# Altium schematic symbol library Centralize.SchLib: 1081 symbols (part 17 of 26)
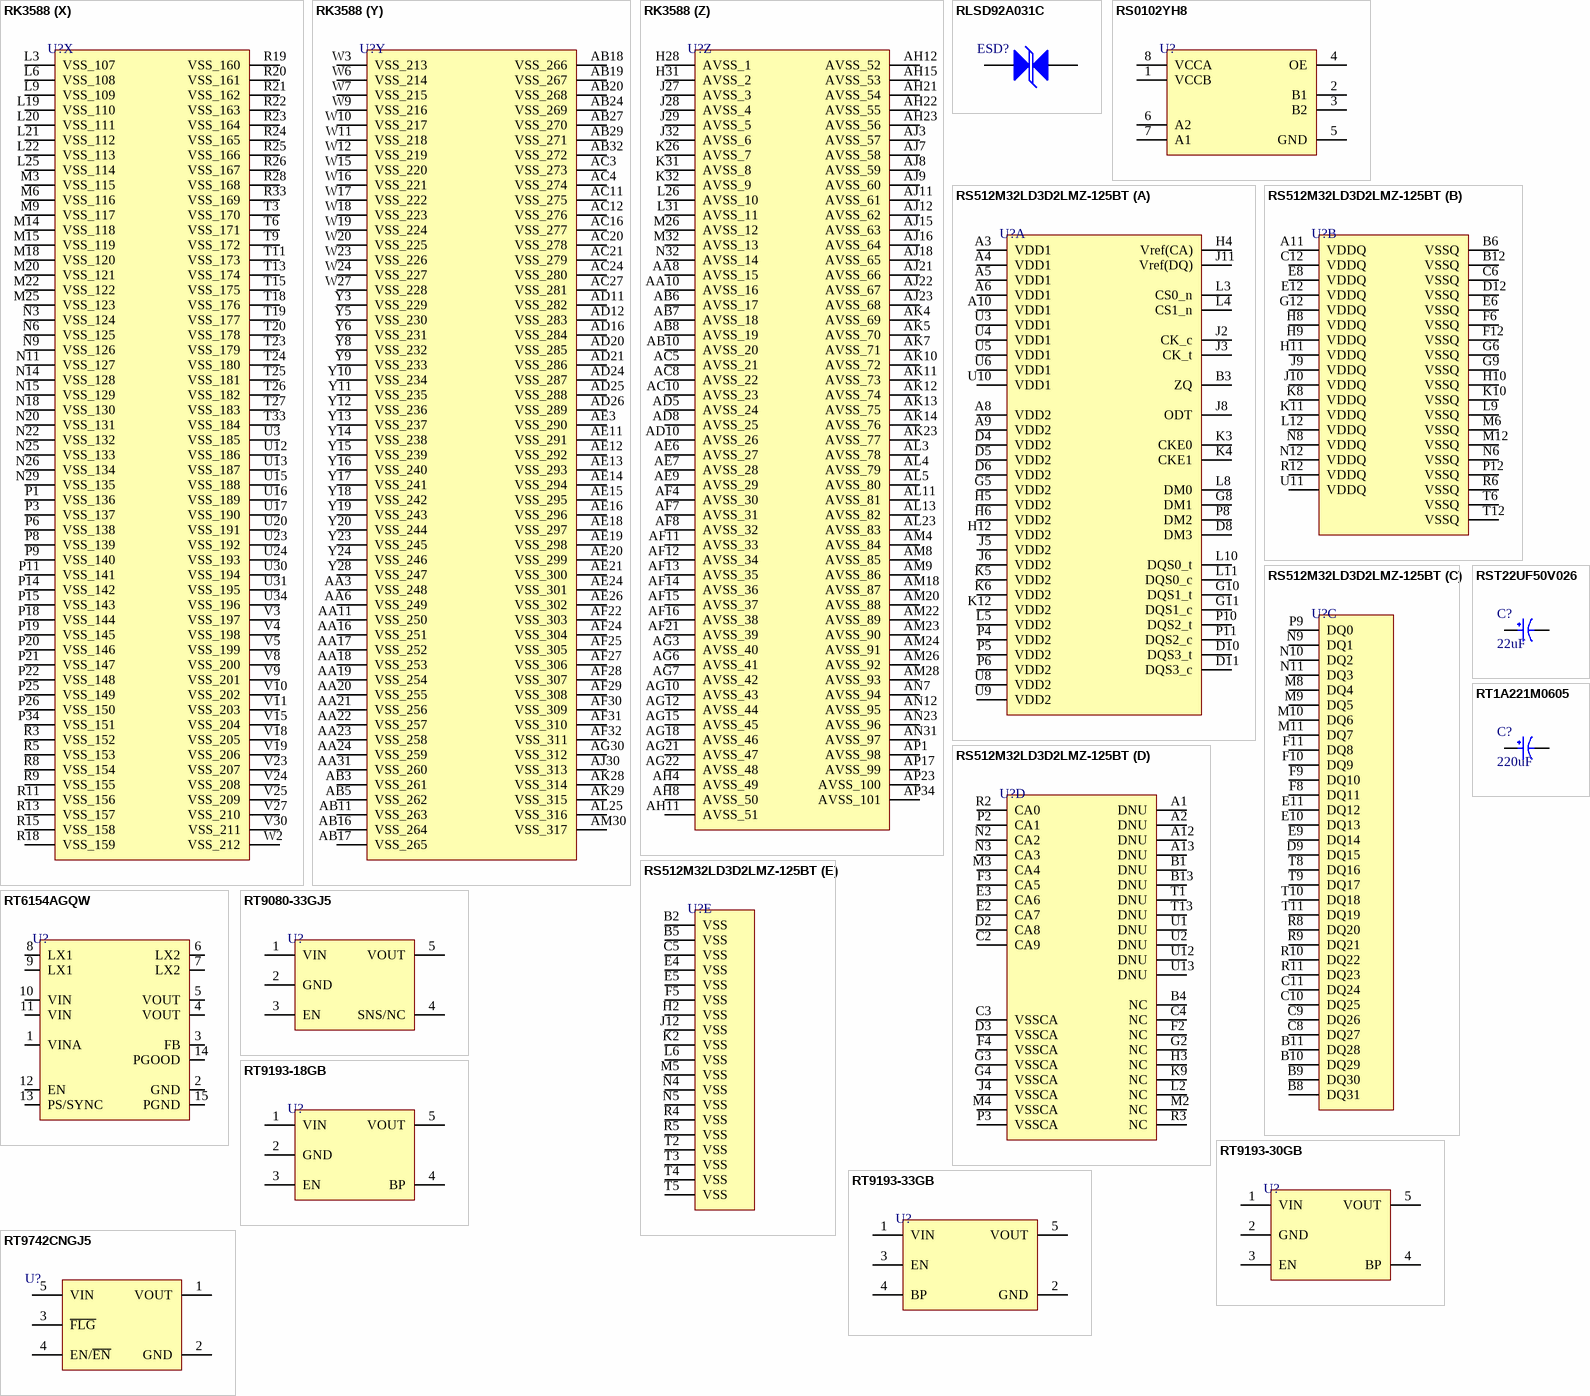
[diagram p63: symbols RK3588 to RT9742CNGJ5]

## RK3588
designator U?
Power Management IC; Manufacturer Part Number: RK3588LP4XEVB; Manufacturer: Rockchip; LCSC Part Number: *; Item Type: IC
footprint FCBGA-1088L
part A pins: AA1 DDR_CH0_DQ14_A, AA2 DDR_CH0_DQ15_A, AA4 DDR_CH0_DQS1N_A, AA5 DDR_CH0_DQS1P_A, AB1 DDR_CH0_DQ9_A, AB2 DDR_CH0_DQ8_A, AB4 DDR_CH0_DM1_A, AC1 DDR_CH0_DQ10_A, AC2 DDR_CH0_DQ11_A, B1       DDR_CH0_DQ11_B, C1       DDR_CH0_DQ9_B, C2       DDR_CH0_DQ10_B, D1       DDR_CH0_DQ15_B, D2       DDR_CH0_DQ8_B, E1       DDR_CH0_DQ13_B, E2       DDR_CH0_DQ14_B, E4 DDR_CH0_DM1_B, F1       DDR_CH0_DQ4_B, F2       DDR_CH0_DQ12_B, F4 DDR_CH0_DQS1N_B, F5 DDR_CH0_DQS1P_B, G1      DDR_CH0_DQ6_B, G2      DDR_CH0_DQ5_B, G4 DDR_CH0_DM0_B, H1       DDR_CH0_DQ0_B, H2       DDR_CH0_DQ7_B, H4 DDR_CH0_WCK1P_B, H5 DDR_CH0_WCK1N_B, H7 DDR_CH0_ZQ_B, J1       DDR_CH0_DQ2_B, J2       DDR_CH0_DQ1_B, J7 DDR_CH0_DQS0N_B, J8 DDR_CH0_DQS0P_B, K1 DDR_CH0_A4_B, K2       DDR_CH0_DQ3_B, K4 DDR_CH0_WCK0N_B, K5 DDR_CH0_WCK0P_B, K7 DDR_CH0_RESET_B, L2 DDR_CH0_A5_B, L4 DDR_CH0_LP4/4X_CKE1/LP5_CS1_B, L5 DDR_CH0_LP4/4X_CKE0/LP5_CS0_B, L7 DDR_CH0_LP4/4X_CS0_B, L8 DDR_CH0_LP4/4X_CS1_B, L10 DDR_CH0_VDDQ_CK, M1 DDR_CH0_CKB_B, M2 DDR_CH0_CK_B, M5 DDR_CH0_A1_B, M7 DDR_CH0_A6_B, M8 DDR_CH0_A0_B, M10 DDR_CH0_VDDQ_0, M11 DDR_CH0_PLL_AVSS, M12 DDR_CH0_PLL_AVDD1V8, N1 DDR_CH0_CKB_A, N2 DDR_CH0_CK_A, N4 DDR_CH0_A3_B, N5 DDR_CH0_A2_B, N7 DDR_CH0_LP4/4X_CKE1/LP5_CS1_A, N8 DDR_CH0_VDDQ_CKE, N10 DDR_CH0_VDDQ_1, N12 DDR_CH0_PLL_DVDD, N13 DDR_CH0_VDD_MIF_0, P2 DDR_CH0_A5_A, P4 DDR_CH0_A2_A, P5 DDR_CH0_A3_A, P7 DDR_CH0_LP4/4X_CKE0/LP5_CS0_A, P10 DDR_CH0_VDDQ_2, P12 DDR_CH0_VDD_3, P13 DDR_CH0_VDD_MIF_1, R1 DDR_CH0_A4_A, R2 DDR_CH0_DQ3_A, R6 DDR_CH0_LP4/4X_CS0_A, R7 DDR_CH0_LP4/4X_CS1_A, R10 DDR_CH0_VDDQ_3, R12 DDR_CH0_VDD_2, T1 DDR_CH0_DQ2_A, T2 DDR_CH0_DQ1_A, T4 DDR_CH0_RESET_A, T5 DDR_CH0_A6_A, T7 DDR_CH0_A0_A, T8 DDR_CH0_A1_A, T10 DDR_CH0_VDDQ_4, T12 DDR_CH0_VDD_1, U1 DDR_CH0_DQ0_A, U2 DDR_CH0_DQ7_A, U4 DDR_CH0_DQS0N_A, U5 DDR_CH0_DQS0P_A, U11 DDR_CH0_VDD_0, V1 DDR_CH0_DQ6_A, V2 DDR_CH0_DQ5_A, V6 DDR_CH0_WCK0N_A, V7 DDR_CH0_WCK0P_A, W1 DDR_CH0_DQ4_A, W4 DDR_CH0_WCK1P_A, W5 DDR_CH0_WCK1N_A, W8 DDR_CH0_ZQ_A, Y1 DDR_CH0_DQ12_A, Y2 DDR_CH0_DQ13_A, Y4 DDR_CH0_DM0_A 
part B pins: A2 DDR_CH1_DQ10_C, A3 DDR_CH1_DQ8_C, A4 DDR_CH1_DQ14_C, A5 DDR_CH1_DQ12_C, A6 DDR_CH1_DQ4_C, A7 DDR_CH1_DQ6_C, A8 DDR_CH1_DQ0_C, A9 DDR_CH1_DQ2_C, A10 DDR_CH1_A4_C, A12 DDR_CH1_CKB_C, A13 DDR_CH1_CKB_D, A15 DDR_CH1_A4_D, A16 DDR_CH1_DQ2_D, A17 DDR_CH1_DQ0_D, A18 DDR_CH1_DQ6_D, A19 DDR_CH1_DQ4_D, A20 DDR_CH1_DQ12_D, A21 DDR_CH1_DQ14_D, A22 DDR_CH1_DQ8_D, A23 DDR_CH1_DQ10_D, B2 DDR_CH1_DQ11_C, B3 DDR_CH1_DQ9_C, B4 DDR_CH1_DQ15_C, B5 DDR_CH1_DQ13_C, B7 DDR_CH1_DQ5_C, B8 DDR_CH1_DQ7_C, B9 DDR_CH1_DQ1_C, B10 DDR_CH1_DQ3_C, B11 DDR_CH1_A5_C, B12 DDR_CH1_CK_C, B13 DDR_CH1_CK_D, B14 DDR_CH1_A5_D, B15 DDR_CH1_DQ3_D, B16 DDR_CH1_DQ1_D, B17 DDR_CH1_DQ7_D, B18 DDR_CH1_DQ5_D, B20 DDR_CH1_DQ13_D, B21 DDR_CH1_DQ15_D, B22 DDR_CH1_DQ9_D, B23 DDR_CH1_DQ11_D, C19 DDR_CH1_RESET_D, D4 DDR_CH1_DM1_C, D5 DDR_CH1_DQS1N_C, D7 DDR_CH1_WCK1P_C, D9 DDR_CH1_DQS0N_C, D10 DDR_CH1_A6_C, D11 DDR_CH1_LP4/4X_CKE0/LP5_CS0_C, D13 DDR_CH1_A3_C, D14 DDR_CH1_A6_D, D16 DDR_CH1_LP4/4X_CKE0/LP5_CS0_D, D17 DDR_CH1_WCK0N_D, D19 DDR_CH1_LP4/4X_CS1_D, D20 DDR_CH1_DM0_D, D21 DDR_CH1_DQS1P_D, D22 DDR_CH1_DM1_D, E5 DDR_CH1_DQS1P_C, E7 DDR_CH1_WCK1N_C, E9 DDR_CH1_DQS0P_C, E10 DDR_CH1_RESET_C, E11 DDR_CH1_LP4/4X_CKE1/LP5_CS1_C, E13 DDR_CH1_A2_C, E14 DDR_CH1_A3_D, E16 DDR_CH1_LP4/4X_CKE1/LP5_CS1_D, E17 DDR_CH1_WCK0P_D, E19 DDR_CH1_LP4/4X_CS0_D, E21 DDR_CH1_DQS1N_D, F8 DDR_CH1_DM0_C, F12 DDR_CH1_A1_C, F18 DDR_CH1_ZQ_D, G8 DDR_CH1_ZQ_C, G9 DDR_CH1_WCK0P_C, G11 DDR_CH1_LP4/4X_CS0_C, G12 DDR_CH1_A0_C, G13 DDR_CH1_A2_D, G14 DDR_CH1_A1_D, G16 DDR_CH1_DQS0N_D, G18 DDR_CH1_WCK1N_D, H9 DDR_CH1_WCK0N_C, H11 DDR_CH1_LP4/4X_CS1_C, H13 DDR_CH1_VDDQ_CKE, H15 DDR_CH1_A0_D, H16 DDR_CH1_DQS0P_D, H18 DDR_CH1_WCK1P_D, K11 DDR_CH1_VDDQ_1, K12 DDR_CH1_VDDQ_0, K13 DDR_CH1_VDDQ_2, K14 DDR_CH1_VDDQ_3, K15 DDR_CH1_VDDQ_4, K16 DDR_CH1_PLL_AVDD1V8, L11 DDR_CH1_VDD_0, L12 DDR_CH1_VDD_1, L13 DDR_CH1_VDD_2, L14 DDR_CH1_VDD_3, L15 DDR_CH1_PLL_DVDD, L16 DDR_CH1_PLL_AVSS, L17 DDR_CH1_VDD_MIF_0, L18 DDR_CH1_VDD_MIF_1, M13 DDR_CH1_VDDQ_CK
part C pins: AA32 EMMC_D5/I2C1_SDA_M3/UART5_TX_M2/GPIO2_D5_u, AA33 EMMC_D3/FSPI_D3_M0/GPIO2_D3_u, AA34 EMMC_RSTN/I2C2_SCL_M2/UART5_RTSN_M1/GPIO2_A3_d, V26 EMMCIO_1V8, V32 EMMC_D2/FSPI_D2_M0/GPIO2_D2_u, V33 EMMC_D7/FSPI_CS1N_M0/GPIO2_D7_u, V34 EMMC_CLKOUT/GPIO2_A1_d, W32 EMMC_D6/FSPI_CS0N_M0/GPIO2_D6_u, W33 EMMC_D1/FSPI_D1_M0/GPIO2_D1_u, W34 EMMC_CMD/FSPI_CLK_M0/GPIO2_A0_u, Y32 EMMC_D4/I2C1_SCL_M3/UART5_RX_M2/GPIO2_D4_u, Y33 EMMC_D0/FSPI_D0_M0/GPIO2_D0_u, Y34 EMMC_DATA_STROBE/I2C2_SDA_M2/UART5_CTSN_M1/GPIO2_A2_d
part D pins: AA7 VCCIO2_1V8, AD1 SDMMC_D1/PDM1_SDI2_M0/JTAG_TMS_M1/I2C3_SDA_M4/UART2_RX_M1/PWM9_M1/GPIO4_D1_u, AD2 SDMMC_D0/PDM1_SDI3_M0/JTAG_TCK_M1/I2C3_SCL_M4/UART2_TX_M1/PWM8_M1/GPIO4_D0_u, AE1 SDMMC_CLK/PDM1_CLK0_M0/TEST_CLKOUT_M0/MCU_JTAG_TMS_M0/CAN0_RX_M1/UART5_TX_M0/GPIO4_D5_d, AE2 SDMMC_CMD/PDM1_CLK1_M0/MCU_JTAG_TCK_M0/CAN0_TX_M1/UART5_RX_M0/PWM7_IR_M1/GPIO4_D4_u, AF1 SDMMC_D3/PDM1_SDI0_M0/JTAG_TMS_M0/I2C8_SDA_M0/UART5_RTSN_M0/PWM10_M1/GPIO4_D3_u, AF2 SDMMC_D2/PDM1_SDI1_M0/JTAG_TCK_M0/I2C8_SCL_M0/UART5_CTSN_M0/GPIO4_D2_u, Y7 VCCIO2
part E pins: K29 CLK32K_IN/CLK32K_OUT0/GPIO0_B2__u, K30 SPI2_CS0_M2/I2C1_SDA_M1/PWM5_M0/UART0_TX_M1/GPIO0_B1_z, L29 SPI2_MISO_M2/I2C0_SCL_M0/GPIO0_B3_z, L30 SPI2_CS1_M2/I2C1_SCL_M1/UART0_RX_M1/GPIO0_B0_z, M29 TVSS, M30 PMIC_INT_L/GPIO0_A7_u, M31 NPOR, N27 OSC_1V8, N28 PMUIO1_1V8, N30 SPI2_MOSI_M2/I2C0_SDA_M0/GPIO0_A6_z, N31 SPI2_CLK_M2/SDMMC_PWREN/PMU_DEBUG/GPIO0_A5_d, P27 PMU_0V75, P31 SDMMC_DET/GPIO0_A4_u, P32 TSADC_SHUT_ORG/TSADC_SHUT/GPIO0_A1_z, P33 REFCLK_OUT/GPIO0_A0_d, R31 PMIC_SLEEP2/GPIO0_A3_d, R32 PMIC_SLEEP1/GPIO0_A2_d, R34 XIN_24M, T34 XOUT_24M, U18 PLL_AVDD1V8, U19 PLL_AVSS, V20 PLL_DVDD0V75
part F pins: P28 PMUIO2, P29 I2S1_MCLK_M1/JTAG_TCK_M2/I2C1_SCL_M0/UART2_TX_M0/PCIE30X1_1_CLKREQN_M0/GPIO0_B5_d, P30 I2S1_SDI0_M1/GPU_AVS/UART0_TX_M0/I2C4_SCL_M2/DP1_HPDIN_M1/PWM4_M0/PCIE30X1_0_PERSTN_M0/GPIO0_C5_u, R27 PMUIO2_1V8, R29 I2S1_SCLK_M1/JTAG_TMS_M2/I2C1_SDA_M0/UART2_RX_M0/PCIE30X1_1_WAKEN_M0/GPIO0_B6_d, R30 PDM0_CLK1_M1/PWM2_M0/UART0_RX_M0/I2C4_SDA_M2/DP0_HPDIN_M1/PCIE30X1_0_WAKEN_M0/GPIO0_C4_d, T28 I2S1_LRCK_M1/PWM0_M0/I2C2_SCL_M0/CAN0_TX_M0/SPI0_CS1_M0/PCIE30X1_1_PERSTN_M0/GPIO0_B7_d, T29 I2S1_SDI1_M1/NPU_AVS/UART0_RTSN/PWM5_M1/SPI0_CLK_M0/PCIE30X4_CLKREQN_M0/SATA_CP_POD/GPIO0_C6_u, T30 PMIC_SLEEP5/GPIO0_C3_d, T31 PDM0_CLK0_M1/PWM1_M0/I2C2_SDA_M0/CAN0_RX_M0/SPI0_MOSI_M0/PCIE30X1_0_CLKREQN_M0/GPIO0_C0_d, T32 PMIC_SLEEP4/GPIO0_C2_d, U32 PMIC_SLEEP3/GPIO0_C1_d, U33 LITCPU_AVS/SPI3_CLK_M2/GPIO0_D3_u, V28 I2S1_SDO3_M1/CPU_BIG1_AVS/I2C1_SDA_M2/CAN2_TX_M1/HDMI_TX0_SCL_M1/SPI3_CS1_M2/SATA_MP_SWITCH/GPIO0_D5_u, V29 I2S1_SDO2_M1/PDM0_SDI2_M1/PWM3_IR_M0/I2C1_SCL_M2/CAN2_RX_M1/HDMI_TX0_SDA_M1/SPI3_CS0_M2/PCIE30X2_PERSTN_M0/SATA_CPDET/GPIO0_D4_u, V31 I2S1_SDI2_M1/PDM0_SDI0_M1/I2C6_SDA_M0/UART1_RTSN_M2/PWM6_M0/SPI0_MISO_M0/PCIE30X4_WAKEN_M0/GPIO0_C7_d, W28 PMIC_SLEEP6/PDM0_SDI3_M1/GPIO0_D6_d, W29 I2S1_SDO1_M1/I2C0_SDA_M2/UART1_RX_M2/HDMI_RX_SCL_M0/SPI3_MOSI_M2/PCIE30X2_WAKEN_M0/HDMI_TX1_CEC_M1/GPIO0_D2_u, W30 I2S1_SDO0_M1/CPU_BIG0_AVS/I2C0_SCL_M2/UART0_CTSN/UART1_TX_M2/HDMI_RX_SDA_M0/SPI0_CS0_M0/PCIE30X2_CLKREQN_M0/HDMI_TX0_CEC_M1/GPIO0_D1_u, W31 I2S1_SDI3_M1/PDM0_SDI1_M1/I2C6_SCL_M0/UART1_CTSN_M2/PWM7_IR_M0/SPI3_MISO_M2/PCIE30X4_PERSTN_M0/GPIO0_D0_d
part G pins: D28 I2S0_SDI0/GPIO1_D4_d, D29 PDM0_CLK0_M0/I2C4_SDA_M4/PWM15_IR_M2/GPIO1_C6_d, D30 I2S0_LRCK/I2C2_SCL_M3/UART4_RTSN/GPIO1_C5_d, E28 I2S0_SDI1/PDM0_SDI3_M0/I2C1_SDA_M4/UART4_RX_M0/PWM1_M1/SPI1_CS0_M2/GPIO1_D3_d, E29 I2S0_SDO0/I2C4_SCL_M4/UART4_CTSN/GPIO1_C7_d, E30 PDM0_CLK1_M0/I2C2_SDA_M3/PWM11_IR_M2/SPI4_CS1_M0/GPIO1_C4_d, E31 I2S0_SCLK/I2C6_SCL_M1/UART3_CTSN/PWM7_IR_M2/SPI4_CS0_M0/GPIO1_C3_d, F26 I2S0_SDO1/I2C7_SCL_M0/UART6_TX_M2/SPI1_MISO_M2/GPIO1_D0_d, F27 I2S0_SDO2/I2S0_SDI3/PDM0_SDI1_M0/I2C7_SDA_M0/UART6_RX_M2/SPI1_MOSI_M2/GPIO1_D1_d, F28 I2S0_SDO3/I2S0_SDI2/PDM0_SDI2_M0/I2C1_SCL_M4/UART4_TX_M0/PWM0_M1/SPI1_CLK_M2/GPIO1_D2_d, F30 I2S0_MCLK/I2C6_SDA_M1/UART3_RTSN/PWM3_IR_M2/SPI4_CLK_M0/GPIO1_C2_d, G20 VCCIO1_1V8, G26 PDM0_SDI0_M0/SPI1_CS1_M2/GPIO1_D5_d, G27 I2C3_SCL_M0/UART3_TX_M0/SPI4_MOSI_M0/GPIO1_C1_z, G29 I2C3_SDA_M0/UART3_RX_M0/SPI4_MISO_M0/GPIO1_C0_z
part H pins: AB30 GMAC0_PPSTRIG/FSPI_CS1N_M1/HDMI_TX1_SCL_M0/I2C4_SCL_M1/UART7_TX_M0/GPIO2_B5_u, AB31 GMAC0_PTP_REFCLK/FSPI_CS0N_M1/HDMI_TX1_SDA_M0/I2C4_SDA_M1/UART7_RX_M0/GPIO2_B4_u, AB33 GMAC0_MDIO/I2C0_SCL_M1/UART9_CTSN_M0/PWM6_M2/SPI3_MOSI_M0/GPIO4_C5_d, AB34 GMAC0_MDC/I2C7_SDA_M1/UART9_RTSN_M0/PWM5_M2/SPI3_MISO_M0/GPIO4_C4_d, AC30 GMAC0_PPSCLK/TEST_CLKOUT_M1/HDMI_TX1_CEC_M0/UART9_RX_M0/SPI1_CS1_M0/GPIO2_C4_d, AC31 GMAC0_RXD3/SDIO_D1_M0/FSPI_D1_M1/UART6_TX_M0/GPIO2_A7_u, AC32 GMAC0_RXD2/SDIO_D0_M0/FSPI_D0_M1/UART6_RX_M0/GPIO2_A6_u, AC33 GMAC0_TXD2/SDIO_D3_M0/FSPI_D3_M1/I2C8_SDA_M1/UART6_CTSN_M0/GPIO2_B1_u, AC34 GMAC0_TXD3/SDIO_CMD_M0/I2C3_SCL_M3/GPIO2_B2_u, AD30 ETH0_REFCLKO_25M/I2S2_SDI_M0/I2C6_SCL_M2/SPI1_CS0_M0/GPIO2_C3_d, AD31 GMAC0_RXD1/I2C6_SDA_M2/UART9_TX_M0/SPI1_MOSI_M0/GPIO2_C2_d, AD32 GMAC0_RXD0/I2C2_SCL_M1/UART1_CTSN_M0/SPI1_MISO_M0/GPIO2_C1_d, AD33 GMAC0_TXD0/I2S2_MCLK_M0/I2C5_SCL_M4/UART1_RX_M0/GPIO2_B6_d, AD34 GMAC0_TXD1/I2S2_SCLK_M0/I2C5_SDA_M4/UART1_TX_M0/GPIO2_B7_d, AE30 CLK32K_OUT1/GPIO2_C5_d, AE31 GMAC0_RXDV_CRS/UART7_RTSN_M0/PWM2_M2/SPI3_CS0_M0/GPIO4_C2_d, AE32 GMAC0_RXCLK/SDIO_D2_M0/FSPI_D2_M1/I2C8_SCL_M1/UART6_RTSN_M0/GPIO2_B0_u, AE33 GMAC0_TXCLK/SDIO_CLK_M0/FSPI_CLK_M1/I2C3_SDA_M3/GPIO2_B3_d, AE34 GMAC0_TXEN/I2S2_LRCK_M0/I2C2_SDA_M1/UART1_RTSN_M0/SPI1_CLK_M0/GPIO2_C0_d, AF33 GMAC0_TXER/I2C0_SDA_M1/UART7_CTSN_M0/PWM7_IR_M3/SPI3_CLK_M0/GPIO4_C6_d, AF34 GMAC0_MCLKINOUT/I2S2_SDO_M0/I2C7_SCL_M1/PWM4_M1/SPI3_CS1_M0/GPIO4_C3_d, Y26 VCCIO3_1V8
part I pins: A24 PCIE30X1_1_CLKREQN_M2/DP0_HPDIN_M2/I2C2_SDA_M4/UART6_RX_M1/SPI4_MISO_M2/GPIO1_A0_d, A25 PCIE30X1_1_WAKEN_M2/DP1_HPDIN_M2/SATA1_ACT_LED_M1/I2C2_SCL_M4/UART6_TX_M1/SPI4_MOSI_M2/GPIO1_A1_d, A26 VOP_POST_EMPTY/I2C4_SDA_M3/UART6_RTSN_M1/PWM0_M2/SPI4_CLK_M2/GPIO1_A2_d, A27 HDMI_TX1_SDA_M2/I2C4_SCL_M3/UART6_CTSN_M1/PWM1_M2/SPI4_CS0_M2/GPIO1_A3_d, B25 HDMI_TX1_SCL_M2/SPI2_MISO_M0/GPIO1_A4_d, B26 HDMI_TX0_HPD_M0/SPI2_MOSI_M0/GPIO1_A5_d, C24 HDMI_TX1_HPD_M0/SPI2_CLK_M0/GPIO1_A6_d, C25 PDM1_SDI0_M1/PCIE30X1_1_PERSTN_M2/PWM3_IR_M3/SPI2_CS0_M0/GPIO1_A7_u, C27 PDM1_SDI1_M1/PCIE30X4_CLKREQN_M3/SPI2_CS1_M0/GPIO1_B0_u, D25 PDM1_SDI2_M1/PCIE30X4_WAKEN_M3/SPI0_MISO_M2/GPIO1_B1_d, D26 PDM1_SDI3_M1/PCIE30X4_PERSTN_M3/UART4_RX_M2/SPI0_MOSI_M2/GPIO1_B2_d, D27 PDM1_CLK1_M1/PCIE30X1_0_WAKEN_M2/SATA0_ACT_LED_M1/UART4_TX_M2/SPI0_CLK_M2/GPIO1_B3_d, E24 PDM1_CLK0_M1/PCIE30X1_0_PERSTN_M2/UART7_RX_M2/SPI0_CS0_M2/GPIO1_B4_u, E25 PCIE30X1_0_CLKREQN_M2/UART7_TX_M2/SPI0_CS1_M2/GPIO1_B5_u, E26 MIPI_CAMERA1_CLK_M0/SPDIF0_TX_M0/PCIE30X2_WAKEN_M3/HDMI_RX_HPDOUT_M2/I2C5_SCL_M3/UART1_TX_M1/GPIO1_B6_u, E27 MIPI_CAMERA2_CLK_M0/SPDIF1_TX_M0/PCIE30X2_PERSTN_M3/HDMI_RX_CEC_M2/SATA2_ACT_LED_M1/I2C5_SDA_M3/UART1_RX_M1/PWM13_M2/GPIO1_B7_u, F24 MIPI_CAMERA3_CLK_M0/HDMI_RX_SCL_M2/I2C8_SCL_M2/UART1_RTSN_M1/PWM14_M2/GPIO1_D6_u, F25 MIPI_CAMERA4_CLK_M0/PCIE30X2_CLKREQN_M3/HDMI_RX_SDA_M2/I2C8_SDA_M2/UART1_CTSN_M1/PWM15_IR_M3/GPIO1_D7_u, H20 VCCIO4_1V8, H21 VCCIO4
part J pins: AA27 HDMI_TX0_HPD_M1/PCIE30X2_PERSTN_M2/HDMI_RX_HPDOUT_M1/MCU_JTAG_TCK_M1/UART9_RX_M2/SPI0_CS0_M3/GPIO3_D4_d, AA28 GMAC1_PTP_REF_CLK/HDMI_TX1_HPD_M1/I2C3_SCL_M1/SPI1_MOSI_M1/GPIO3_B7_d, AA29 GMAC1_TXD2/SDIO_D0_M1/I2S3_MCLK/FSPI_D0_M2/I2C6_SDA_M4/PWM10_M0/SPI4_MISO_M1/GPIO3_A0_u, AA30 GMAC1_TXD3/SDIO_D1_M1/I2S3_SCLK/AUDDSM_LN/FSPI_D1_M2/I2C6_SCL_M4/PWM11_IR_M0/SPI4_MOSI_M1/GPIO3_A1_u, AB28 PCIE30X4_BUTTON_RSTN/DP1_HPDIN_M0/MCU_JTAG_TMS_M1/UART9_TX_M2/PWM11_IR_M3/SPI0_CS1_M3/GPIO3_D5_d, AC28 GMAC1_TXD0/I2S2_SDO_M1/UART2_RTSN/GPIO3_B3_u, AC29 GMAC1_TXD1/I2S2_MCLK_M1/UART2_CTSN/GPIO3_B4_u, AD27 GMAC1_RXD2/SDIO_D2_M1/I2S3_LRCK/AUDDSM_LP/FSPI_D2_M2/UART8_TX_M1/SPI4_CLK_M1/GPIO3_A2_u, AD28 GMAC1_TXCLK/SDIO_CMD_M1/I2S3_SDI/AUDDSM_RP/UART8_RTSN_M1/SPI4_CS1_M1/GPIO3_A4_d, AD29 GMAC1_TXEN/I2S2_SCLK_M1/CAN1_RX_M0/UART3_TX_M1/PWM12_M0/GPIO3_B5_u, AE27 GMAC1_RXD3/SDIO_D3_M1/I2S3_SDO/AUDDSM_RN/FSPI_D3_M2/UART8_RX_M1/SPI4_CS0_M1/GPIO3_A3_u, AE28 GMAC1_TXER/I2S2_SDI_M1/UART2_RX_M2/PWM3_IR_M1/GPIO3_B2_d, AE29 GMAC1_MCLKINOUT/I2S2_LRCK_M1/CAN1_TX_M0/UART3_RX_M1/PWM13_M0/GPIO3_B6_d, AG23 CIF_D13/PCIE20X1_2_PERSTN_M0/HDMI_RX_CEC_M1/UART4_TX_M1/PWM9_M2/SPI0_MISO_M3/GPIO3_D1_d, AG24 CIF_D15/PCIE30X2_WAKEN_M2/HDMI_RX_SDA_M1/I2C7_SDA_M2/UART9_CTSN_M2/PWM10_M2/SPI0_CLK_M3/GPIO3_D3_d, AG25 CIF_D14/PCIE30X2_CLKREQN_M2/HDMI_RX_SCL_M1/I2C7_SCL_M2/UART9_RTSN_M2/SPI0_MOSI_M3/GPIO3_D2_d, AG26 CIF_D10/PCIE30X4_PERSTN_M2/HDMI_TX1_SCL_M1/SPI3_MISO_M3/GPIO3_C6_u, AG28 GMAC1_RXD1/MIPI_CAMERA3_CLK_M1/PWM9_M0/GPIO3_B0_u, AG29 GMAC1_RXD0/MIPI_CAMERA2_CLK_M1/PWM8_M0/GPIO3_A7_u, AH24 CIF_D12/PCIE20X1_2_WAKEN_M0/HDMI_TX0_SDA_M2/I2C5_SDA_M0/UART4_RX_M1/PWM8_M2/SPI3_CLK_M3/GPIO3_D0_u, AH25 CIF_D9/FSPI_CS1N_M2/PCIE30X4_WAKEN_M2/HDMI_TX1_SDA_M1/CAN2_TX_M0/UART5_RX_M1/SPI3_CS1_M3/GPIO3_C5_u, AH26 CIF_D8/FSPI_CS0N_M2/PCIE30X4_CLKREQN_M2/HDMI_TX1_CEC_M2/CAN2_RX_M0/UART5_TX_M1/SPI3_CS0_M3/GPIO3_C4_u, AH27 ETH1_REFCLKO_25M/MIPI_CAMERA1_CLK_M1/I2C4_SCL_M0/GPIO3_A6_d, AH29 GMAC1_RXDV_CRS/MIPI_CAMERA4_CLK_M1/UART2_TX_M2/PWM2_M1/GPIO3_B1_d, AH30 GMAC1_RXCLK/SDIO_CLK_M1/MIPI_CAMERA0_CLK_M1/FSPI_CLK_M2/I2C4_SDA_M0/UART8_CTSN_M1/GPIO3_A5_d, AJ24 CIF_D11/PCIE20X1_2_CLKREQN_M0/HDMI_TX0_SCL_M2/I2C5_SCL_M0/SPI3_MOSI_M3/GPIO3_C7_u, W25 VCCIO5_1V8, W26 VCCIO5, Y27 GMAC1_PPSCLK/PCIE30X2_BUTTON_RSTN/UART7_RX_M1/SPI1_CLK_M1/GPIO3_C1_d, Y29 GMAC1_PPSTRIG/I2C3_SDA_M1/UART7_TX_M1/SPI1_MISO_M1/GPIO3_C0_d, Y30 GMAC1_MDIO/MIPI_TE1/I2C8_SDA_M4/UART7_CTSN_M1/PWM15_IR_M0/SPI1_CS1_M1/GPIO3_C3_d, Y31 GMAC1_MDC/MIPI_TE0/I2C8_SCL_M4/UART7_RTSN_M1/PWM14_M0/SPI1_CS0_M1/GPIO3_C2_d
part K pins: AC25 VCCIO6_1V8, AC26 VCCIO6, AJ25 BT1120_D14/PCIE20X1_2_WAKEN_M1/HDMI_TX0_SDA_M0/I2C8_SCL_M3/SPI3_CS0_M1/GPIO4_C0_u, AJ26 BT1120_D11/PCIE30X4_WAKEN_M1/HDMI_RX_CEC_M0/SATA1_ACT_LED_M0/UART9_RX_M1/PWM12_M1/SPI3_MISO_M1/GPIO4_B5_d, AJ27 BT1120_D12/PCIE30X4_PERSTN_M1/HDMI_RX_HPDOUT_M0/SATA0_ACT_LED_M0/I2C5_SCL_M1/PWM13_M1/SPI3_MOSI_M1/GPIO4_B6_d, AJ28 BT1120_D13/PCIE20X1_2_CLKREQN_M1/HDMI_TX0_SCL_M0/I2C5_SDA_M1/SPI3_CLK_M1/GPIO4_B7_u, AK24 BT1120_D15/SPDIF1_TX_M2/PCIE20X1_2_PERSTN_M1/HDMI_TX0_CEC_M0/I2C8_SDA_M3/PWM6_M1/SPI3_CS1_M1/GPIO4_C1_d, AK25 CIF_HREF/BT1120_D8/I2S1_SDO1_M0/PCIE30X1_1_BUTTON_RSTN/I2C7_SCL_M3/UART8_RTSN_M0/PWM14_M1/SPI0_CS0_M1/CAN1_RX_M1/GPIO4_B2_u, AK26 CIF_CLKIN/BT1120_CLKOUT/I2S1_SDI3_M0/PCIE30X2_PERSTN_M1/I2C6_SDA_M3/UART8_TX_M0/SPI2_CS1_M1/GPIO4_B0_d, AK27 CIF_D5/BT1120_D5/I2S1_SDI0_M0/PCIE30X1_0_PERSTN_M1/I2C3_SDA_M2/UART3_TX_M2/SPI2_MOSI_M1/GPIO4_A5_d, AK30 CIF_D0/BT1120_D0/I2S1_MCLK_M0/PCIE30X1_1_CLKREQN_M1/UART9_RTSN_M1/SPI0_MISO_M1/GPIO4_A0_d, AL24 MIPI_CAMERA0_CLK_M0/SPDIF1_TX_M1/I2S1_SDO0_M0/PCIE30X1_0_BUTTON_RSTN/SATA2_ACT_LED_M0/I2C6_SCL_M3/UART8_RX_M0/SPI0_CS1_M1/GPIO4_B1_u, AL26 CIF_CLKOUT/BT1120_D10/I2S1_SDO3_M0/PCIE30X4_CLKREQN_M1/DP0_HPDIN_M0/SPDIF0_TX_M1/UART9_TX_M1/PWM11_IR_M1/GPIO4_B4_u, AL27 CIF_D6/BT1120_D6/I2S1_SDI1_M0/PCIE30X2_CLKREQN_M1/I2C5_SCL_M2/UART3_RX_M2/SPI2_CLK_M1/GPIO4_A6_d, AL28 CIF_D4/BT1120_D4/PCIE30X1_0_WAKEN_M1/I2C3_SCL_M2/UART0_RX_M2/SPI2_MISO_M1/GPIO4_A4_d, AL29 CIF_D3/BT1120_D3/PCIE30X1_0_CLKREQN_M1/UART0_TX_M2/GPIO4_A3_d, AL30 CIF_D1/BT1120_D1/I2S1_SCLK_M0/PCIE30X1_1_WAKEN_M1/UART9_CTSN_M1/SPI0_MOSI_M1/GPIO4_A1_d, AM25 CIF_VSYNC/BT1120_D9/I2S1_SDO2_M0/PCIE20X1_2_BUTTON_RSTN/I2C7_SDA_M3/UART8_CTSN_M0/PWM15_IR_M1/CAN1_TX_M1/GPIO4_B3_u, AM27 CIF_D7/BT1120_D7/I2S1_SDI2_M0/PCIE30X2_WAKEN_M1/I2C5_SDA_M2/SPI2_CS0_M1/GPIO4_A7_d, AM29 CIF_D2/BT1120_D2/I2S1_LRCK_M0/PCIE30X1_1_PERSTN_M1/SPI0_CLK_M1/GPIO4_A2_d
part L pins: AG9 USB20_HOST0_REXT, AG11 USB20_AVDD_1V8, AH9 USB20_HOST1_REXT, AH10 USB20_DVDD_0V75, AJ10 USB20_AVDD_3V3, AK6 USB20_HOST0_DP, AK8 TYPEC1_USB20_OTG_ID, AK9 TYPEC1_USB20_OTG_DP, AL6 USB20_HOST0_DM, AL7 USB20_HOST1_DP, AL8 TYPEC1_USB20_VBUSDET, AL9 TYPEC1_USB20_OTG_DM, AL12 TYPEC0_USB20_OTG_DP, AL14 TYPEC0_USB20_OTG_ID, AM7 USB20_HOST1_DM, AM12 TYPEC0_USB20_OTG_DM, AM14 TYPEC0_USB20_VBUSDET, AP7 TYPEC1_USB20_OTG1_REXT, AP12 TYPEC0_USB20_OTG0_REXT
part M pins: AG13 TYPEC1_DP1_VDDH_1V8, AG14 TYPEC0_DP0_VDDH_1V8, AG16 TYPEC1_DP1_REXT, AH13 TYPEC1_DP1_VDD_0V85, AH14 TYPEC0_DP0_VDDA_0V85, AH16 TYPEC0_DP0_REXT, AJ13 TYPEC1_DP1_VDDA_0V85, AJ14 TYPEC0_DP0_VDD_0V85, AL10 TYPEC1_SBU1/DP1_AUXP, AL15 TYPEC0_SBU1/DP0_AUXP, AM10 TYPEC1_SBU2/DP1_AUXN, AM15 TYPEC0_SBU2/DP0_AUXN, AN8 TYPEC1_SSRX1P/DP1_TX0P, AN9 TYPEC1_SSTX1N/DP1_TX1N, AN10 TYPEC1_SSRX2P/DP1_TX2P, AN11 TYPEC1_SSTX2N/DP1_TX3N, AN13 TYPEC0_SSRX1P/DP0_TX0P, AN14 TYPEC0_SSTX1N/DP0_TX1N, AN15 TYPEC0_SSRX2P/DP0_TX2P, AN16 TYPEC0_SSTX2N/DP0_TX3N, AP8 TYPEC1_SSRX1N/DP1_TX0N, AP9 TYPEC1_SSTX1P/DP1_TX1P, AP10 TYPEC1_SSRX2N/DP1_TX2N, AP11 TYPEC1_SSTX2P/DP1_TX3P, AP13 TYPEC0_SSRX1N/DP0_TX0N, AP14 TYPEC0_SSTX1P/DP0_TX1P, AP15 TYPEC0_SSRX2N/DP0_TX2N, AP16 TYPEC0_SSTX2P/DP0_TX3P
part N pins: G30 PCIE20_2_REFCLKN, G31 PCIE20_2_REFCLKP, H29 PCIE20_2_TXN/SATA30_2_TXN/USB30_2_SSTXN, H30 PCIE20_2_TXP/SATA30_2_TXP/USB30_2_SSTXP, H32 PCIE20_1_REFCLKP, H33 PCIE20_1_REFCLKN, J30 PCIE20_2_RXN/SATA30_2_RXN/USB30_2_SSRXN, J31 PCIE20_2_RXP/SATA30_2_RXP/USB30_2_SSRXP, J33 PCIE20_1_RXP/SATA30_1_RXP, J34 PCIE20_1_RXN/SATA30_1_RXN, K27 PCIE20_SATA30_USB30_2_AVDD_1V8, K28 PCIE20_SATA30_USB30_2_AVDD_0V85, K33 PCIE20_1_TXP/SATA30_1_TXP, K34 PCIE20_1_TXN/SATA30_1_TXN, L27 PCIE20_SATA30_1_AVDD_1V8, L28 PCIE20_SATA30_1_AVDD_0V85, L32 PCIE20_0_REFCLKP, L33 PCIE20_0_REFCLKN, M27 PCIE20_SATA30_0_AVDD_1V8, M28 PCIE20_SATA30_0_AVDD_0V85, M33 PCIE20_0_TXN/SATA30_0_TXN, M34 PCIE20_0_TXP/SATA30_0_TXP, N33 PCIE20_0_RXP/SATA30_0_RXP, N34 PCIE20_0_RXN/SATA30_0_RXN
part O pins: A28 PCIE30_PORT1_REF_CLKP, A30 PCIE30_PORT1_TX0N, A32 PCIE30_PORT1_RX0N, A33 PCIE30_PORT1_RESREF, B28 PCIE30_PORT1_REF_CLKN, B29 PCIE30_PORT1_TX1N, B30 PCIE30_PORT1_TX0P, B31 PCIE30_PORT1_RX1N, B32 PCIE30_PORT1_RX0P, B34 PCIE30_PORT0_RESREF, C29 PCIE30_PORT1_TX1P, C31 PCIE30_PORT1_RX1P, C33 PCIE30_PORT0_TX1P, C34 PCIE30_PORT0_TX1N, D32 PCIE30_PORT0_TX0P, D33 PCIE30_PORT0_TX0N, E33 PCIE30_PORT0_REF_CLKP, E34 PCIE30_PORT0_REF_CLKN, F32 PCIE30_PORT0_RX1P, F33 PCIE30_PORT0_RX1N, G23 PCIE30_PORT0_AVDD1V8, G24 PCIE30_PORT0_AVDD0V75, G33 PCIE30_PORT0_RX0P, G34 PCIE30_PORT0_RX0N, H23 PCIE30_PORT1_AVDD1V8, H24 PCIE30_PORT1_AVDD0V75
part P pins: AA25 MIPI_CSI1_AVCC0V75, AA26 MIPI_CSI1_AVCC1V8, AB25 MIPI_CSI0_AVCC0V75, AB26 MIPI_CSI0_AVCC1V8, AG31 MIPI_CSI1_D0P, AG32 MIPI_CSI1_D0N, AG33 MIPI_CSI0_D0P, AG34 MIPI_CSI0_D0N, AH31 MIPI_CSI1_D1P, AH32 MIPI_CSI1_D1N, AH33 MIPI_CSI0_D1P, AH34 MIPI_CSI0_D1N, AJ31 MIPI_CSI1_CLK0P, AJ32 MIPI_CSI1_CLK0N, AJ33 MIPI_CSI0_CLK0P, AJ34 MIPI_CSI0_CLK0N, AK31 MIPI_CSI1_D2P, AK32 MIPI_CSI1_D2N, AK33 MIPI_CSI0_D2P, AK34 MIPI_CSI0_D2N, AL31 MIPI_CSI1_D3P, AL32 MIPI_CSI1_D3N, AL33 MIPI_CSI0_D3P, AL34 MIPI_CSI0_D3N, AM31 MIPI_CSI1_CLK1P, AM32 MIPI_CSI1_CLK1N, AM33 MIPI_CSI0_CLK1P, AM34 MIPI_CSI0_CLK1N
part Q pins: AF20 MIPI_D/C_PHY0_VREG, AG20 MIPI_D/C_PHY0_VDD, AH20 MIPI_D/C_PHY0_VDD_1V2, AJ20 MIPI_D/C_PHY0_VDD_1V8, AN24 MIPI_DPHY0_TX_D0P/MIPI_CPHY0_TX_TRIO0_B, AN25 MIPI_DPHY0_TX_D1P/MIPI_CPHY0_TX_TRIO1_A, AN26 MIPI_DPHY0_TX_CLKP/MIPI_CPHY0_TX_TRIO1_C, AN27 MIPI_DPHY0_TX_D2P/MIPI_CPHY0_TX_TRIO2_B, AN28 MIPI_DPHY0_TX_D3P/NO_USE, AN29 MIPI_DPHY0_RX_D0P/MIPI_CPHY0_RX_TRIO0_B, AN30 MIPI_DPHY0_RX_D1P/MIPI_CPHY0_RX_TRIO1_A, AN32 MIPI_DPHY0_RX_CLKP/MIPI_CPHY0_RX_TRIO1_C, AN33 MIPI_DPHY0_RX_D2P/MIPI_CPHY0_RX_TRIO2_B, AN34 MIPI_DPHY0_RX_D3P/NO_USE, AP24 MIPI_DPHY0_TX_D0N/MIPI_CPHY0_TX_TRIO0_A, AP25 MIPI_DPHY0_TX_D1N/MIPI_CPHY0_TX_TRIO0_C, AP26 MIPI_DPHY0_TX_CLKN/MIPI_CPHY0_TX_TRIO1_B, AP27 MIPI_DPHY0_TX_D2N/MIPI_CPHY0_TX_TRIO2_A, AP28 MIPI_DPHY0_TX_D3N/MIPI_CPHY0_TX_TRIO2_C, AP29 MIPI_DPHY0_RX_D0N/MIPI_CPHY0_RX_TRIO0_A, AP30 MIPI_DPHY0_RX_D1N/MIPI_CPHY0_RX_TRIO0_C, AP31 MIPI_DPHY0_RX_CLKN/MIPI_CPHY0_RX_TRIO1_B, AP32 MIPI_DPHY0_RX_D2N/MIPI_CPHY0_RX_Trio2_A, AP33 MIPI_DPHY0_RX_D3N/MIPI_CPHY0_RX_TRIO2_C
part R pins: AF19 MIPI_D/C_PHY1_VREG, AG19 MIPI_D/C_PHY1_VDD, AH19 MIPI_D/C_PHY1_VDD_1V2, AJ19 MIPI_D/C_PHY1_VDD_1V8, AK18 MIPI_DPHY1_RX_D0P/MIPI_CPHY1_RX_TRIO0_B, AK19 MIPI_DPHY1_RX_D1P/MIPI_CPHY1_RX_TRIO1_A, AK20 MIPI_DPHY1_RX_CLKP/MIPI_CPHY1_RX_TRIO1_C, AK21 MIPI_DPHY1_RX_D2P/MIPI_CPHY1_RX_TRIO2_B, AK22 MIPI_DPHY1_RX_D3P/NO_USE, AL18 MIPI_DPHY1_RX_D0N/MIPI_CPHY1_RX_TRIO0_A, AL19 MIPI_DPHY1_RX_D1N/MIPI_CPHY1_RX_TRIO0_C, AL20 MIPI_DPHY1_RX_CLKN/MIPI_CPHY1_RX_TRIO1_B, AL21 MIPI_DPHY1_RX_D2N/MIPI_CPHY1_RX_TRIO2_A, AL22 MIPI_DPHY1_RX_D3N/MIPI_CPHY1_RX_TRIO2_C, AN18 MIPI_DPHY1_TX_D0P/MIPI_CPHY1_TX_TRIO0_B, AN19 MIPI_DPHY1_TX_D1P/MIPI_CPHY1_TX_TRIO1_A, AN20 MIPI_DPHY1_TX_CLKP/MIPI_CPHY1_TX_TRIO1_C, AN21 MIPI_DPHY1_TX_D2P/MIPI_CPHY1_TX_TRIO2_B, AN22 MIPI_DPHY1_TX_D3P/NO_USE, AP18 MIPI_DPHY1_TX_D0N/MIPI_CPHY1_TX_TRIO0_A, AP19 MIPI_DPHY1_TX_D1N/MIPI_CPHY1_TX_TRIO0_C, AP20 MIPI_DPHY1_TX_CLKN/MIPI_CPHY1_TX_TRIO1_B, AP21 MIPI_DPHY1_TX_D2N/MIPI_CPHY1_TX_TRIO2_A, AP22 MIPI_DPHY1_TX_D3N/MIPI_CPHY1_TX_TRIO2_C
part S pins: AA9 HDMI/eDP_TX0_VDD_0V75, AB9 HDMI/eDP_TX0_AVDD_0V75, AC6 HDMI/eDP_TX0_VDD_CMN_1V8, AC7 HDMI/eDP_TX0_VDD_IO_1V8, AC9 HDMI/eDP_TX1_AVDD_0V75, AD6 HDMI/eDP_TX1_VDD_CMN_1V8, AD7 HDMI/eDP_TX1_VDD_IO_1V8, AD9 HDMI/eDP_TX1_VDD_0V75, AG1 HDMI_TX0_SBDN/EDP_TX0_AUXN, AG2 HDMI_TX0_SBDP/EDP_TX0_AUXP, AH2 HDMI_TX0_D3N/EDP_TX0_D3N, AH3 HDMI_TX0_D3P/EDP_TX0_D3P, AJ1 HDMI_TX0_D0N/EDP_TX0_D0N, AJ2 HDMI_TX0_D0P/EDP_TX0_D0P, AK2 HDMI_TX0_D1N/EDP_TX0_D1N, AK3 HDMI_TX0_D1P/EDP_TX0_D1P, AL1 HDMI_TX0_D2N/EDP_TX0_D2N, AL2 HDMI_TX0_D2P/EDP_TX0_D2P, AM2 HDMI/eDP_TX0_REXT, AM3 HDMI_TX1_D3P/EDP_TX1_D3P, AM5 HDMI_TX1_D1P/EDP_TX1_D1P, AN1 HDMI/eDP_TX1_REXT, AN2 HDMI_TX1_SBDP/EDP_TX1_AUXP, AN3 HDMI_TX1_D3N/EDP_TX1_D3N, AN4 HDMI_TX1_D0P/EDP_TX1_D0P, AN5 HDMI_TX1_D1N/EDP_TX1_D1N, AN6 HDMI_TX1_D2P/EDP_TX1_D2P, AP2 HDMI_TX1_SBDN/EDP_TX1_AUXN, AP4 HDMI_TX1_D0N/EDP_TX1_D0N, AP6 HDMI_TX1_D2N/EDP_TX1_D2N
part T pins: AE4 HDMI_RX_VPH3V3, AE5 HDMI_RX_DVDD3V3, AE8 HDMI_RX_AVDD0V75, AF3 HDMI_RX_REXT, AF5 HDMI_RX_CLKN, AF6 HDMI_RX_CLKP, AG4 HDMI_RX_D0N, AG5 HDMI_RX_D0P, AH5 HDMI_RX_D1N, AH6 HDMI_RX_D1P, AJ4 HDMI_RX_D2N, AJ5 HDMI_RX_D2P
part U pins: AD3 OTP_VDDOTP_0V75, AD4 NC, AF18 TSADC_TEST_OUT_TS, AH18 SARADC_AVDD_1V8, AK15 SARADC_IN5, AK16 SARADC_IN2, AK17 SARADC_IN7, AL16 SARADC_IN1, AL17 SARADC_IN6, AM16 SARADC_IN0_BOOT, AM17 SARADC_IN4, AN17 SARADC_IN3
part V pins: AA12 VDD_GPU_MEM_0, AA13 VDD_GPU_0, AA14 VDD_GPU_7, AA15 VDD_GPU_11, AB12 VDD_GPU_MEM_1, AB13 VDD_GPU_1, AB14 VDD_GPU_6, AB15 VDD_GPU_10, AB21 VDD_NPU_6, AB22 VDD_NPU_5, AB23 VDD_NPU_2, AC13 VDD_GPU_2, AC14 VDD_GPU_5, AC15 VDD_GPU_9, AC17 VDD_LOGIC_5, AC18 VDD_LOGIC_4, AC19 VDD_LOGIC_3, AC22 VDD_NPU_4, AC23 VDD_NPU_1, AD13 VDD_GPU_3, AD14 VDD_GPU_4, AD15 VDD_GPU_8, AD17 VDD_LOGIC_0, AD18 VDD_LOGIC_1, AD19 VDD_LOGIC_2, AD22 VDD_NPU_3, AD23 VDD_NPU_0, AE22 VDD_NPU_MEM_0, AE23 VDD_NPU_MEM_1, K19 VDD_LOGIC_8, K20 VDD_LOGIC_9, K23 VDD_CPU_BIG1_9, K24 VDD_CPU_BIG1_0, L23 VDD_CPU_BIG1_8, L24 VDD_CPU_BIG1_1, M16 VDD_CPU_BIG0_0, M17 VDD_CPU_BIG0_9, M19 VDD_CPU_BIG0_MEM_0, M21 VDD_CPU_BIG1_MEM_0, M23 VDD_CPU_BIG1_7, M24 VDD_CPU_BIG1_2, N16 VDD_CPU_BIG0_1, N17 VDD_CPU_BIG0_8, N19 VDD_CPU_BIG0_MEM_1, N21 VDD_CPU_BIG1_MEM_1, N23 VDD_CPU_BIG1_6, N24 VDD_CPU_BIG1_3, P16 VDD_CPU_BIG0_2, P17 VDD_CPU_BIG0_7, P23 VDD_CPU_BIG1_5, P24 VDD_CPU_BIG1_4, R14 VDD_VDENC_0, R16 VDD_CPU_BIG0_3, R17 VDD_CPU_BIG0_6, T14 VDD_VDENC_1, T16 VDD_CPU_BIG0_4, T17 VDD_CPU_BIG0_5, T21 VDD_CPU_LIT_MEM_1, T22 VDD_CPU_LIT_MEM_0, U14 VDD_VDENC_2, U21 VDD_CPU_LIT_7, U22 VDD_CPU_LIT_0, V12 VDD_VDENC_MEM_0, V13 VDD_VDENC_MEM_1, V14 VDD_VDENC_3, V16 VDD_LOGIC_6, V17 VDD_LOGIC_7, V21 VDD_CPU_LIT_6, V22 VDD_CPU_LIT_1, W13 VDD_VDENC_5, W14 VDD_VDENC_4, W21 VDD_CPU_LIT_5, W22 VDD_CPU_LIT_2, Y21 VDD_CPU_LIT_4, Y22 VDD_CPU_LIT_3
part W pins: A1 VSS_1, A11 VSS_2, A14 VSS_3, A34 VSS_4, B6 VSS_5, B19 VSS_6, B24 VSS_7, B27 VSS_8, B33 VSS_9, C3 VSS_10, C4 VSS_11, C5 VSS_12, C6 VSS_13, C7 VSS_14, C8 VSS_15, C9 VSS_16, C10 VSS_17, C11 VSS_18, C12 VSS_19, C13 VSS_20, C14 VSS_21, C15 VSS_22, C16 VSS_23, C17 VSS_24, C18 VSS_25, C20 VSS_26, C21 VSS_27, C22 VSS_28, C23 VSS_29, C26 VSS_30, C28 VSS_31, C30 VSS_32, C32 VSS_33, D3 VSS_34, D23 VSS_35, D24 VSS_36, D31 VSS_37, E3 VSS_38, E6 VSS_39, E8 VSS_40, E12 VSS_41, E18 VSS_42, E20 VSS_43, E22 VSS_44, E23 VSS_45, E32 VSS_46, F3 VSS_47, F7 VSS_48, F9 VSS_49, F10 VSS_50, F11 VSS_51, F13 VSS_52, F14 VSS_53, F15 VSS_54, F16 VSS_55, F19 VSS_56, F20 VSS_57, F21 VSS_58, F22 VSS_59, F23 VSS_60, F31 VSS_61, G3 VSS_62, G6 VSS_63, G10 VSS_64, G15 VSS_65, G19 VSS_66, G21 VSS_67, G22 VSS_68, G25 VSS_69, G32 VSS_70, H3 VSS_71, H6 VSS_72, H10 VSS_73, H12 VSS_74, H14 VSS_75, H19 VSS_76, H22 VSS_77, H25 VSS_78, H26 VSS_79, J3 VSS_80, J4 VSS_81, J5 VSS_82, J6 VSS_83, J10 VSS_84, J11 VSS_85, J12 VSS_86, J13 VSS_87, J14 VSS_88, J15 VSS_89, J16 VSS_90, J18 VSS_91, J19 VSS_92, J20 VSS_93, J21 VSS_94, J22 VSS_95, J23 VSS_96, J24 VSS_97, J25 VSS_98, K3 VSS_99, K6 VSS_100, K8 VSS_101, K9 VSS_102, K18 VSS_103, K21 VSS_104, K22 VSS_105, L1 VSS_106
part X pins: L3 VSS_107, L6 VSS_108, L9 VSS_109, L19 VSS_110, L20 VSS_111, L21 VSS_112, L22 VSS_113, L25 VSS_114, M3 VSS_115, M6 VSS_116, M9 VSS_117, M14 VSS_118, M15 VSS_119, M18 VSS_120, M20 VSS_121, M22 VSS_122, M25 VSS_123, N3 VSS_124, N6 VSS_125, N9 VSS_126, N11 VSS_127, N14 VSS_128, N15 VSS_129, N18 VSS_130, N20 VSS_131, N22 VSS_132, N25 VSS_133, N26 VSS_134, N29 VSS_135, P1 VSS_136, P3 VSS_137, P6 VSS_138, P8 VSS_139, P9 VSS_140, P11 VSS_141, P14 VSS_142, P15 VSS_143, P18 VSS_144, P19 VSS_145, P20 VSS_146, P21 VSS_147, P22 VSS_148, P25 VSS_149, P26 VSS_150, P34 VSS_151, R3 VSS_152, R5 VSS_153, R8 VSS_154, R9 VSS_155, R11 VSS_156, R13 VSS_157, R15 VSS_158, R18 VSS_159, R19 VSS_160, R20 VSS_161, R21 VSS_162, R22 VSS_163, R23 VSS_164, R24 VSS_165, R25 VSS_166, R26 VSS_167, R28 VSS_168, R33 VSS_169, T3 VSS_170, T6 VSS_171, T9 VSS_172, T11 VSS_173, T13 VSS_174, T15 VSS_175, T18 VSS_176, T19 VSS_177, T20 VSS_178, T23 VSS_179, T24 VSS_180, T25 VSS_181, T26 VSS_182, T27 VSS_183, T33 VSS_184, U3 VSS_185, U12 VSS_186, U13 VSS_187, U15 VSS_188, U16 VSS_189, U17 VSS_190, U20 VSS_191, U23 VSS_192, U24 VSS_193, U30 VSS_194, U31 VSS_195, U34 VSS_196, V3 VSS_197, V4 VSS_198, V5 VSS_199, V8 VSS_200, V9 VSS_201, V10 VSS_202, V11 VSS_203, V15 VSS_204, V18 VSS_205, V19 VSS_206, V23 VSS_207, V24 VSS_208, V25 VSS_209, V27 VSS_210, V30 VSS_211, W2 VSS_212
part Y pins: AA3 VSS_248, AA6 VSS_249, AA11 VSS_250, AA16 VSS_251, AA17 VSS_252, AA18 VSS_253, AA19 VSS_254, AA20 VSS_255, AA21 VSS_256, AA22 VSS_257, AA23 VSS_258, AA24 VSS_259, AA31 VSS_260, AB3 VSS_261, AB5 VSS_262, AB11 VSS_263, AB16 VSS_264, AB17 VSS_265, AB18 VSS_266, AB19 VSS_267, AB20 VSS_268, AB24 VSS_269, AB27 VSS_270, AB29 VSS_271, AB32 VSS_272, AC3 VSS_273, AC4 VSS_274, AC11 VSS_275, AC12 VSS_276, AC16 VSS_277, AC20 VSS_278, AC21 VSS_279, AC24 VSS_280, AC27 VSS_281, AD11 VSS_282, AD12 VSS_283, AD16 VSS_284, AD20 VSS_285, AD21 VSS_286, AD24 VSS_287, AD25 VSS_288, AD26 VSS_289, AE3 VSS_290, AE11 VSS_291, AE12 VSS_292, AE13 VSS_293, AE14 VSS_294, AE15 VSS_295, AE16 VSS_296, AE18 VSS_297, AE19 VSS_298, AE20 VSS_299, AE21 VSS_300, AE24 VSS_301, AE26 VSS_302, AF22 VSS_303, AF24 VSS_304, AF25 VSS_305, AF27 VSS_306, AF28 VSS_307, AF29 VSS_308, AF30 VSS_309, AF31 VSS_310, AF32 VSS_311, AG30 VSS_312, AJ30 VSS_313, AK28 VSS_314, AK29 VSS_315, AL25 VSS_316, AM30 VSS_317, W3 VSS_213, W6 VSS_214, W7 VSS_215, W9 VSS_216, W10 VSS_217, W11 VSS_218, W12 VSS_219, W15 VSS_220, W16 VSS_221, W17 VSS_222, W18 VSS_223, W19 VSS_224, W20 VSS_225, W23 VSS_226, W24 VSS_227, W27 VSS_228, Y3 VSS_229, Y5 VSS_230, Y6 VSS_231, Y8 VSS_232, Y9 VSS_233, Y10 VSS_234, Y11 VSS_235, Y12 VSS_236, Y13 VSS_237, Y14 VSS_238, Y15 VSS_239, Y16 VSS_240, Y17 VSS_241, Y18 VSS_242, Y19 VSS_243, Y20 VSS_244, Y23 VSS_245, Y24 VSS_246, Y28 VSS_247
part Z pins: AA8 AVSS_15, AA10 AVSS_16, AB6 AVSS_17, AB7 AVSS_18, AB8 AVSS_19, AB10 AVSS_20, AC5 AVSS_21, AC8 AVSS_22, AC10 AVSS_23, AD5 AVSS_24, AD8 AVSS_25, AD10 AVSS_26, AE6 AVSS_27, AE7 AVSS_28, AE9 AVSS_29, AF4 AVSS_30, AF7 AVSS_31, AF8 AVSS_32, AF11 AVSS_33, AF12 AVSS_34, AF13 AVSS_35, AF14 AVSS_36, AF15 AVSS_37, AF16 AVSS_38, AF21 AVSS_39, AG3 AVSS_40, AG6 AVSS_41, AG7 AVSS_42, AG10 AVSS_43, AG12 AVSS_44, AG15 AVSS_45, AG18 AVSS_46, AG21 AVSS_47, AG22 AVSS_48, AH4 AVSS_49, AH8 AVSS_50, AH11 AVSS_51, AH12 AVSS_52, AH15 AVSS_53, AH21 AVSS_54, AH22 AVSS_55, AH23 AVSS_56, AJ3 AVSS_57, AJ7 AVSS_58, AJ8 AVSS_59, AJ9 AVSS_60, AJ11 AVSS_61, AJ12 AVSS_62, AJ15 AVSS_63, AJ16 AVSS_64, AJ18 AVSS_65, AJ21 AVSS_66, AJ22 AVSS_67, AJ23 AVSS_68, AK4 AVSS_69, AK5 AVSS_70, AK7 AVSS_71, AK10 AVSS_72, AK11 AVSS_73, AK12 AVSS_74, AK13 AVSS_75, AK14 AVSS_76, AK23 AVSS_77, AL3 AVSS_78, AL4 AVSS_79, AL5 AVSS_80, AL11 AVSS_81, AL13 AVSS_82, AL23 AVSS_83, AM4 AVSS_84, AM8 AVSS_85, AM9 AVSS_86, AM18 AVSS_87, AM20 AVSS_88, AM22 AVSS_89, AM23 AVSS_90, AM24 AVSS_91, AM26 AVSS_92, AM28 AVSS_93, AN7 AVSS_94, AN12 AVSS_95, AN23 AVSS_96, AN31 AVSS_97, AP1 AVSS_98, AP17 AVSS_99, AP23 AVSS_100, AP34 AVSS_101, H28 AVSS_1, H31 AVSS_2, J27 AVSS_3, J28 AVSS_4, J29 AVSS_5, J32 AVSS_6, K26 AVSS_7, K31 AVSS_8, K32 AVSS_9, L26 AVSS_10, L31 AVSS_11, M26 AVSS_12, M32 AVSS_13, N32 AVSS_14
part A text: DDR_PLL POWER; 0.75V-0.85V; LP4/4X_CKE&LP5_CS & Reset Power; 1.8V; LPDDR4/4X=1.1V; LPDDR5=1.05V; MEMORY INTERFACE POWER; CK Power; LPDDR4/4X=0.6V; LPDDR5=0.5V; DIGITAL CORE POWER; DDR IO POWER; (Except for ck, cke and reset)
part B text: DDR_PLL POWER; LP4/4X_CKE&LP5_CS & Reset Power; 0.75V-0.85V; LPDDR4/4X=1.1V; 1.8V; LPDDR5=1.05V; MEMORY INTERFACE POWER; CK Power; LPDDR4/4X=0.6V; LPDDR5=0.5V; DIGITAL CORE POWER; DDR IO POWER; (Except for ck, cke and reset)
part C text: EMMCIO Domain; Operating Voltage=1.8V
part D text: VCCIO2 Domain; Operating Voltage=1.8V/3.3V
part E text: OSC; PMUIO1 Domain; Operating Voltage=1.8V Only; PLL; PMUIO1/2 Domain Logic Power; Operating Voltage=0.75V
part F text: PMUIO2 Domain; Operating Voltage=1.8V/3.3V
part G text: VCCIO1 Domain; Operating Voltage=1.8V
part H text: VCCIO3 Domain; Operating Voltage=1.8V
part I text: VCCIO4 Domain; Operating Voltage=1.8V/3.3V
part J text: VCCIO5 Domain; Operating Voltage=1.8V/3.3V
part K text: VCCIO6 Domain; Operating Voltage=1.8V/3.3V
part L text: USB2.0 of TYPEC0; (OTG/HOST/DEVICE); HS/FS/LS; Download Port; 40K; USB2.0 of TYPEC1; USB2.0 HOST0; USB2.0 HOST1; USB2.0 POWER
part M text: USB3.0 OTG/DP1.4 Alt; of TYPEC0; USB:U3/Gen1----Controller0; DP:RBR/HBR/HBR2/HBR3; of TYPEC1; USB:U3/Gen1----Controller1
part N text: PCIE20/SATA30 Mux0; input or output; PCIe20x1_2; 1Lane(RC)--4(1L2); MUX; SATA30 HOST; Controller0; PCIE20:Gen1/Gen2; SATA30:Gen1/Gen2/Gen3; PCIE20/SATA30 Mux1; PCIe30x1_0; 1Lane(RC)--2(1L0); Controller1; PCIe30x1_1; 1Lane(RC)--3(1L1); Controller2; USB30 HOST; USB 30:Gen1
part O text: PCIE30X4; PCIE30 PORT0; PCIe30X4; 4Lane(DM)--0(4L); Lane 0; PCIe30x1_0; 1Lane(RC)--2(1L0); Lane 1; PCIE30:; PCIe1.1(2.5Gbps); PCIe2.1(5Gbps); PCIe3.0(8Gbps); PCIE30 PORT1; PCIe30x2; 2Lane(RC)--1(2L); PCIe30x1_1; 1Lane(RC)--3(1L1)
part P text: MIPI DPHY CSI_RX Port0; MIPI V1.2/2.5Gbps; MIPI DPHY CSI_RX Port1
part Q text: MIPI D/C-PHY DSI_TX Port0; D-PHY:V2.0 4.5Gbps/Lane; C-PHY:V1.1 5.7Gbps/Trio; MIPI D/C-PHY CSI_RX Port0; MIPI D/C-PHY POWER
part R text: MIPI D/C-PHY DSI_TX Port1; D-PHY:V2.0 4.5Gbps/Lane; C-PHY:V1.1 5.7Gbps/Trio; MIPI D/C-PHY CSI_RX Port1; MIPI D/C-PHY POWER
part S text: HDMI TX/eDP MUX Port0; HDMI:V2.1 12Gbps; eDP: V1.3 5.4Gbps; HDMI TX/eDP MUX Port1
part T text: HDMI RX; HDMI:V2.0
part U text: SARADC; 12-bit 1MS/s; OTP; TSADC
part V text: GPU; CPU_BIG0; LOGIC; CPU_BIG1; VDENC; LIT(LIT+DSU+L3); NPU

## RLSD92A031C
designator ESD?
Bidirectional 3.3V 10V 1A SOD-923 ESD Protection Devices RoHS; Manufacturer: RUILON(Shenzhen Ruilongyuan Elec); Manufacturer Part Number: RLSD92A031C; Package: SOD-923; Polarity: Bidirectional; Voltage - Reverse Standoff (Typ): 3.3V; Voltage - Clamping (Max) @ Ipp: 10V; Current - Peak Pulse (10/1000μs): 1A; LCSC Part Number: C20730
footprint SOD-923.
pins: 1, 2

## RS0102YH8
designator U?
IC Trnsltr Bidirectional SOT23-8; Manufacturer: RUNIC Technology; Manufacturer Part Number: RS0102YH8; Supplier 1: Digi-Key; RoHS: No; Category: Uncategorized; Stock 1: 3666; Pricing 1: 1=0.67000, 10=0.57600, 25=0.53800, 100=0.43040, 250=0.39960, 500=0.33814, 1000=0.26129 (USD); Supplier Part Number 1: 3565-RS0102YH8CT-ND; LCSC Part Number: C783414; Item Type: IC; ComponentLink1Description: LCSC; ComponentLink1URL: https://www.lcsc.com/product-detail/Translators-Level-Shifters_Jiangsu-RUNIC-Tech-RS0102YH8_C783414.html
footprint SOT-23-8
pins: 1 VCCB, 2 B1, 3 B2, 4 OE, 5 GND, 6 A2, 7 A1, 8 VCCA

## RS512M32LD3D2LMZ-125BT
designator U?
16Gbit 800MHz 1.7V~1.95V -25℃~+85℃ FBGA-178 SDRAM ROHS; Manufacturer: Rayson; Manufacturer Part Number: RS512M32LD3D2LMZ-125BT; Footprint: FBGA-178; LCSC Part Number: C2840153; ComponentLink1Description: LCSC; ComponentLink1URL: https://www.lcsc.com/product-detail/SDRAM_Rayson-RS512M32LD3D2LMZ-125BT_C2840153.html
footprint FBGA-178 SDRAM_ (16Gbit 800MHz 1.7V~1.95V -25?~+85? FBGA-178 SDRAM ROHS)
part A pins: A3 VDD1, A4 VDD1, A5 VDD1, A6 VDD1, A8 VDD2, A9 VDD2, A10 VDD1, B3 ZQ, D4 VDD2, D5 VDD2, D6 VDD2, D8 DM3, D10 DQS3_t, D11 DQS3_c, G5 VDD2, G8 DM1, G10 DQS1_t, G11 DQS1_c, H4 Vref(CA), H5 VDD2, H6 VDD2, H12 VDD2, J2 CK_c, J3 CK_t, J5 VDD2, J6 VDD2, J8 ODT, J11 Vref(DQ), K3 CKE0, K4 CKE1, K5 VDD2, K6 VDD2, K12 VDD2, L3 CS0_n, L4 CS1_n, L5 VDD2, L8 DM0, L10 DQS0_t, L11 DQS0_c, P4 VDD2, P5 VDD2, P6 VDD2, P8 DM2, P10 DQS2_t, P11 DQS2_c, U3 VDD1, U4 VDD1, U5 VDD1, U6 VDD1, U8 VDD2, U9 VDD2, U10 VDD1
part B pins: A11 VDDQ, B6 VSSQ, B12 VSSQ, C6 VSSQ, C12 VDDQ, D12 VSSQ, E6 VSSQ, E8 VDDQ, E12 VDDQ, F6 VSSQ, F12 VSSQ, G6 VSSQ, G9 VSSQ, G12 VDDQ, H8 VDDQ, H9 VDDQ, H10 VSSQ, H11 VDDQ, J9 VDDQ, J10 VDDQ, K8 VDDQ, K10 VSSQ, K11 VDDQ, L9 VSSQ, L12 VDDQ, M6 VSSQ, M12 VSSQ, N6 VSSQ, N8 VDDQ, N12 VDDQ, P12 VSSQ, R6 VSSQ, R12 VDDQ, T6 VSSQ, T12 VSSQ, U11 VDDQ
part C pins: B8 DQ31, B9 DQ30, B10 DQ29, B11 DQ28, C8 DQ27, C9 DQ26, C10 DQ25, C11 DQ24, D9 DQ15, E9 DQ14, E10 DQ13, E11 DQ12, F8 DQ11, F9 DQ10, F10 DQ9, F11 DQ8, M8 DQ4, M9 DQ5, M10 DQ6, M11 DQ7, N9 DQ1, N10 DQ2, N11 DQ3, P9 DQ0, R8 DQ20, R9 DQ21, R10 DQ22, R11 DQ23, T8 DQ16, T9 DQ17, T10 DQ18, T11 DQ19
part D pins: A1 DNU, A2 DNU, A12 DNU, A13 DNU, B1 DNU, B4 NC, B13 DNU, C2 CA9, C3 VSSCA, C4 NC, D2 CA8, D3 VSSCA, E2 CA7, E3 CA6, F2 NC, F3 CA5, F4 VSSCA, G2 NC, G3 VSSCA, G4 VSSCA, H3 NC, J4 VSSCA, K9 NC, L2 NC, M2 NC, M3 CA4, M4 VSSCA, N2 CA2, N3 CA3, P2 CA1, P3 VSSCA, R2 CA0, R3 NC, T1 DNU, T13 DNU, U1 DNU, U2 DNU, U12 DNU, U13 DNU
part E pins: B2 VSS, B5 VSS, C5 VSS, E4 VSS, E5 VSS, F5 VSS, H2 VSS, J12 VSS, K2 VSS, L6 VSS, M5 VSS, N4 VSS, N5 VSS, R4 VSS, R5 VSS, T2 VSS, T3 VSS, T4 VSS, T5 VSS

## RST22UF50V026
designator C?, comment 22uF
22uF 50V ±20% SMD,D6.3xL5.4mm Aluminum Electrolytic Capacitors - SMD ROHS; Manufacturer: KNSCHA; Manufacturer Part Number: RST22UF50V026; Package: SMD,D6.3xL5.4mm; LCSC Part Number: C4747979; Item Type: Capacitor; ComponentLink1Description: LCSC; ComponentLink1URL: https://www.lcsc.com/product-detail/Aluminum-Electrolytic-Capacitors-SMD_KNSCHA-RST22UF50V026_C4747979.html
footprint RST22UF50V026
pins: 1, 2

## RT1A221M0605
designator C?, comment 220uF
220uF 5.4mm 10V 6.3mm ±20% SMD,D6.3xL5.4mm Aluminum Electrolytic Capacitors - SMD ROHS; Manufacturer: ROQANG; Manufacturer Part Number: RT1A221M0605; Package: SMD,D6.3xL5.4mm; LCSC Part Number: C267466; Item Type: Capacitor; ComponentLink1Description: LCSC; ComponentLink1URL: https://lcsc.com/product-detail/Aluminum-Electrolytic-Capacitors-SMD_ROQANG-RT1A221M0605_C267466.html
footprint RT1A221M0605
pins: 1, 2

## RT6154AGQW
designator U?
IC REG BCK BST ADJ 4A 14WDFN; Manufacturer: Richtek; Manufacturer Part Number: RT6154AGQW; Supplier: Digi-Key; Supplier Part Number: 1028-1338-1-ND; RoHS: Yes; Category: Voltage Regulators - Switching; Stock: 7681; Pricing: 1=2.97, 10=2.668, 25=2.5176, 100=2.1448, 250=2.01392, 500=1.7622 (USD); ComponentLink1URL: http://www.farnell.com/datasheets/2045512.pdf?src-supplier=Element14; ComponentLink1Description: http://www.farnell.com/datasheets/2045512.pdf?src-supplier=Element14; ComponentLink2URL: https://www.richtek.com/assets/product_file/RT6154A=RT6154B/DS6154AB-01.pdf?src-supplier=Digi-Key; ComponentLink2Description: https://www.richtek.com/assets/product_file/RT6154A=RT6154B/DS6154AB-01.pdf?src-supplier=Digi-Key; LCSC Part Number: C250400; Item Type: IC
footprint DFN-14(3x4)
pins: 1 VINA, 2 GND, 3 FB, 4 VOUT, 5 VOUT, 6 LX2, 7 LX2, 8 LX1, 9 LX1, 10 VIN, 11 VIN, 12 EN, 13 PS/SYNC, 14 PGOOD, 15 PGND

## RT9080-33GJ5
designator U?
TSOT-23-5 Linear Voltage Regulators (LDO) ROHS; Manufacturer: Richtek Tech; Manufacturer Part Number: RT9080-33GJ5; Item Type: IC; Package: TSOT-23-5; LCSC Part Number: C841192; ComponentLink1Description: LCSC; ComponentLink1URL: https://www.lcsc.com/product-detail/Linear-Voltage-Regulators-LDO_Richtek-Tech-RT9080-33GJ5_C841192.html
footprint TSOT-23-5
pins: 1 VIN, 2 GND, 3 EN, 4 SNS/NC, 5 VOUT

## RT9193-18GB
designator U?
IC REG LDO 1.8V 0.3A SOT23-5; Manufacturer: Richtek; Manufacturer Part Number: RT9193-18GB; Min Input Voltage: 2.5V; Max Input Voltage: 5.5V; Output Current: 300mA; Number of Regulators: 1; Min Current Limit: 360mA; Supplier 1: Digi-Key; RoHS: Yes; Category: Voltage Regulators - Linear; Stock 1: 11875; Pricing 1: 1=0.50000, 10=0.40900, 25=0.37360, 100=0.27810, 250=0.25208, 500=0.20860, 1000=0.15646 (USD); Mount: Surface Mount; Case/Package: SOT-23-5; Number of Pins: 5; Min Operating Temperature: -40°C; Max Operating Temperature: 125°C; Nominal Output Voltage: 1.8V; Packaging: Tape and Reel; Output Voltage: 1.8V; Series: -; REACH SVHC: Unknown; Lead Free: Lead Free; RoHS Compliant: Yes; ComponentLink1URL: https://www.richtek.com/assets/product_file/RT9193/DS9193-17.pdf?src-supplier=Digi-Key; ComponentLink1Description: https://www.richtek.com/assets/product_file/RT9193/DS9193-17.pdf?src-supplier=Digi-Key; ComponentLink2URL: http://www.farnell.com/datasheets/1720535.pdf?src-supplier=Element14; ComponentLink2Description: http://www.farnell.com/datasheets/1720535.pdf?src-supplier=Element14; Supplier Part Number 1: 1028-1016-1-ND; Item Type: IC
footprint SOT-23-5
pins: 1 VIN, 2 GND, 3 EN, 4 BP, 5 VOUT

## RT9193-30GB
designator U?
IC REG LDO 3V 0.3A SOT23-5; Manufacturer: Richtek; Manufacturer Part Number: RT9193-30GB; Dropout Voltage: 220mV; Min Input Voltage: 2.5V; Max Input Voltage: 5.5V; Output Current: 300mA; Number of Regulators: 1; Min Current Limit: 360mA; Supplier 1: Farnell; RoHS: Yes; Category: Voltage Regulators - Linear; Pricing 1: 3000=0.20900 (GBP); Mount: Surface Mount; Case/Package: SOT-23-5; Number of Pins: 5; Min Operating Temperature: -40°C; Max Operating Temperature: 125°C; Packaging: Tape and Reel; Nominal Output Voltage: 3V; Output Voltage: 3V; Series: -; REACH SVHC: Unknown; Lead Free: Lead Free; RoHS Compliant: Yes; ComponentLink1URL: https://datasheet.ciiva.com/22749/1720535-22749550.pdf?src-supplier=Element14; ComponentLink1Description: https://datasheet.ciiva.com/22749/1720535-22749550.pdf?src-supplier=Element14; Supplier Part Number 1: 2363159; Item Type: IC
footprint SOT-23-5
pins: 1 VIN, 2 GND, 3 EN, 4 BP, 5 VOUT

## RT9193-33GB
designator U?
IC REG LDO 3.3V 0.3A SOT23-5; Manufacturer: Richtek; Manufacturer Part Number: RT9193-33GB; Dropout Voltage: 220mV; Min Input Voltage: 2.5V; Max Input Voltage: 5.5V; Output Current: 300mA; Number of Regulators: 1; Min Current Limit: 360mA; Supplier 1: Digi-Key; RoHS: Yes; Category: Voltage Regulators - Linear; Stock 1: 17182; Pricing 1: 1=0.50000, 10=0.40900, 25=0.37360, 100=0.27810, 250=0.25208, 500=0.20860, 1000=0.15646 (USD); Mount: Surface Mount; Case/Package: SOT-23-5; Number of Pins: 5; Min Operating Temperature: -40°C; Max Operating Temperature: 125°C; Packaging: Tape and Reel; Nominal Output Voltage: 3.3V; Output Voltage: 3.3V; Series: -; REACH SVHC: Unknown; Lead Free: Lead Free; RoHS Compliant: Yes; ComponentLink1URL: https://datasheet.ciiva.com/2046/3d3futf-83fb3frfm5mtkzlte2lnbkzg3d3d3f3d-2046896.pdf?src-supplier=Digi-Key; ComponentLink1Description: https://datasheet.ciiva.com/2046/3d3futf-83fb3frfm5mtkzlte2lnbkzg3d3d3f3d-2046896.pdf?src-supplier=Digi-Key; ComponentLink2URL: https://datasheet.ciiva.com/28652/1782157-28652989.pdf?src-supplier=Element14; ComponentLink2Description: https://datasheet.ciiva.com/28652/1782157-28652989.pdf?src-supplier=Element14; Supplier Part Number 1: 1028-1014-1-ND; Item Type: IC; LCSC Part Number: C15651
footprint SOT-23-5
pins: 1 VIN, 2 GND, 3 EN, 4 BP, 5 VOUT

## RT9742CNGJ5
designator U?
IC PWR SWTCH N-CHAN 1:1 TSOT23-5; Manufacturer: Richtek; Manufacturer Part Number: RT9742CNGJ5; Number of Outputs: 1; Interface: On/Off; Max Output Current: 2A; On-State Resistance: 70mR; Fault Protection: Over Temperature,Reverse Current; Output Configuration: High Side; Supplier 1: Digi-Key; Stock 1: 6785; Pricing 1: 1=1.61, 10=1.444, 25=1.362, 100=1.1605, 250=1.08968, 500=0.95348, 1000=0.79002 (USD); Case/Package: SOT-23-5; Number of Pins: 23; Min Operating Temperature: -40°C; Max Operating Temperature: 85°C; Packaging: Tape and Reel; REACH SVHC: No SVHC; RoHS Compliant: Yes; ComponentLink1URL: http://www.richtek.com/assets/product_file/RT9742/DS9742-03.pdf?src-supplier=Digi-Key; ComponentLink1Description: http://www.richtek.com/assets/product_file/RT9742/DS9742-03.pdf?src-supplier=Digi-Key; ComponentLink2URL: https://www.richtek.com/assets/product_file/RT9742/DS9742-07.pdf?src-supplier=Digi-Key; ComponentLink2Description: https://www.richtek.com/assets/product_file/RT9742/DS9742-07.pdf?src-supplier=Digi-Key; ComponentLink3URL: http://www.farnell.com/datasheets/2045592.pdf?src-supplier=Element14; ComponentLink3Description: http://www.farnell.com/datasheets/2045592.pdf?src-supplier=Element14; Supplier Part Number 1: 1028-1430-1-ND; Item Type: IC
footprint TSOT-23-5
pins: 1 VOUT, 2 GND, 3 ~{FLG}, 4 EN/~{EN}, 5 VIN

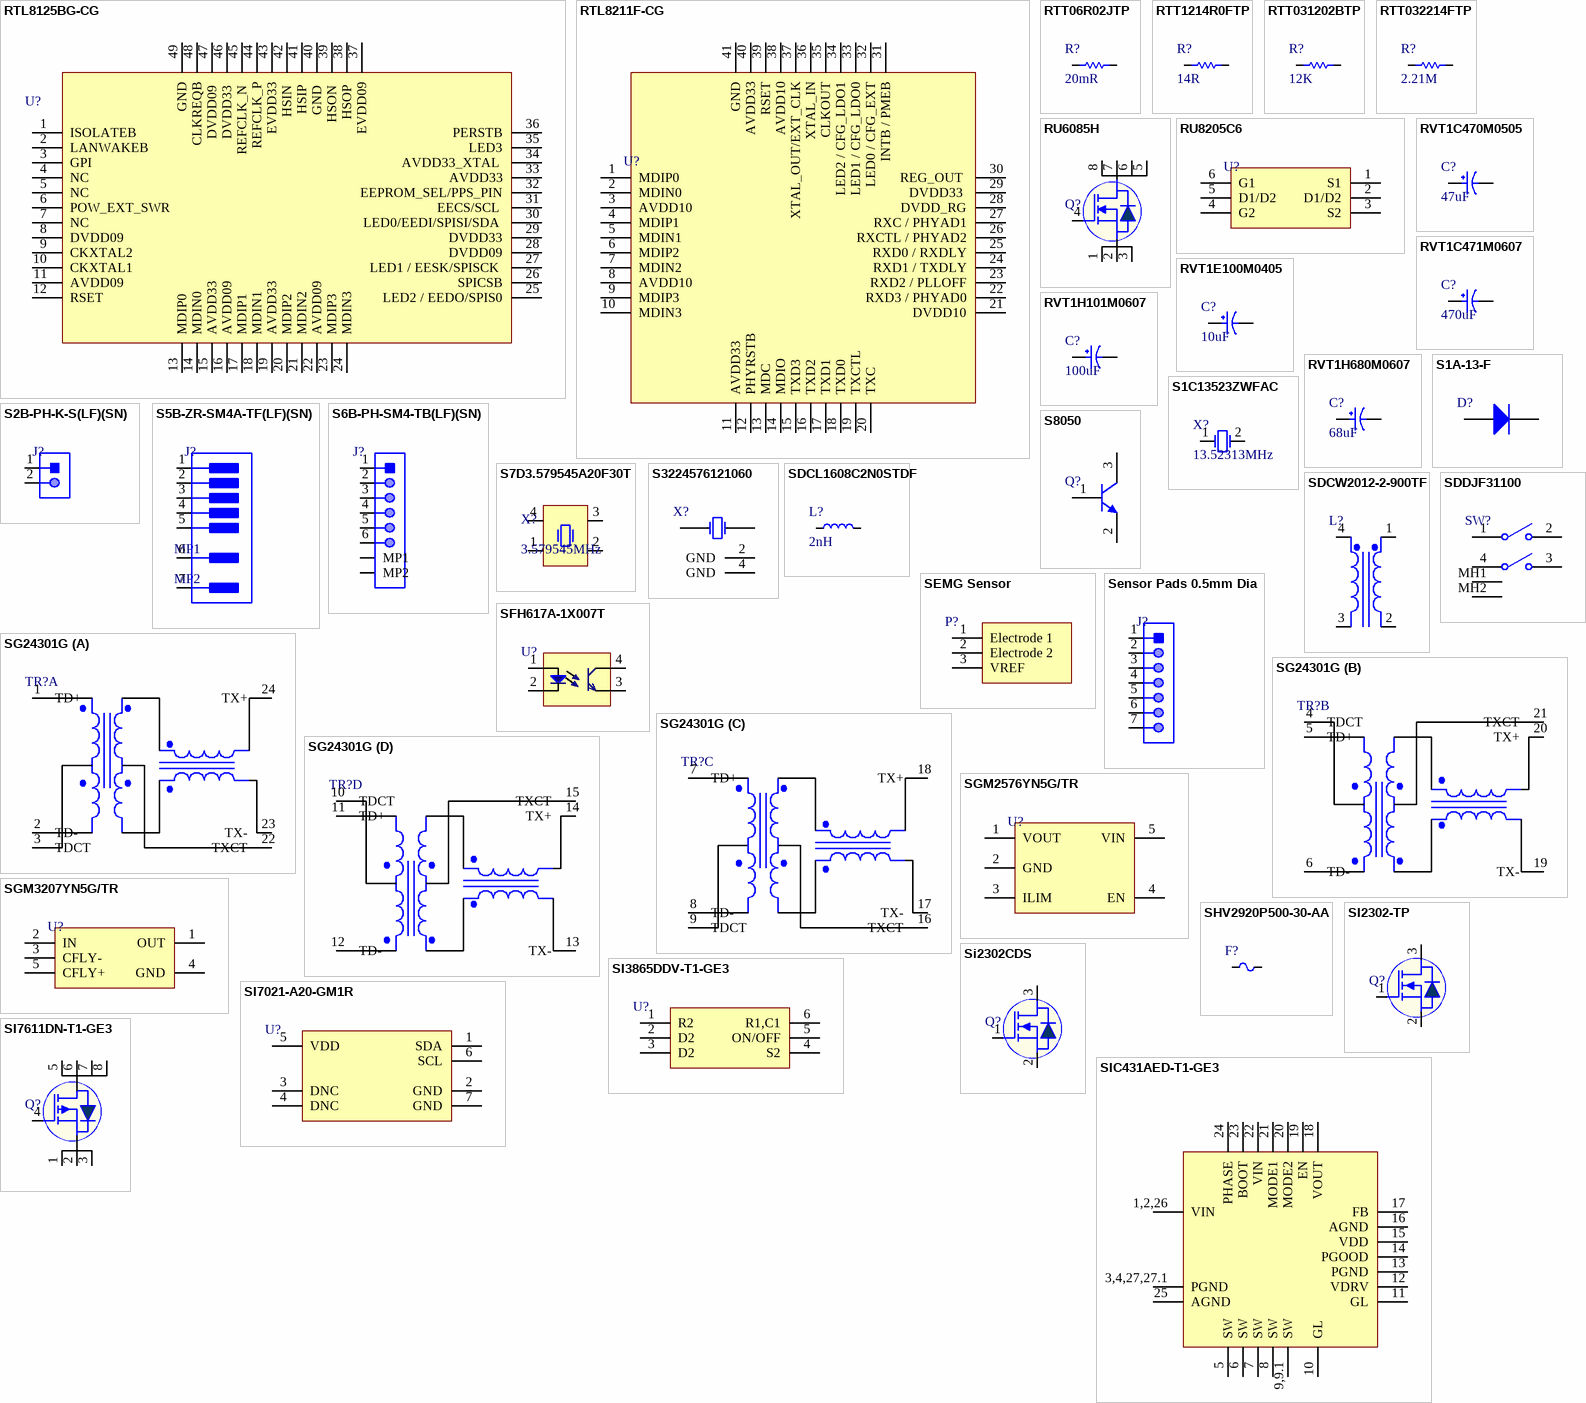
[diagram p36: symbols RTL8125BG-CG to SIC431AED-T1-GE3]

## RTL8125BG-CG
designator U?
QFN48 Ethernet ICs ROHS; Manufacturer: Realtek Semicon; Manufacturer Part Number: RTL8125BG-CG; Item Type: IC; Package: QFN48; LCSC Part Number: C3013605; ComponentLink1Description: LCSC; ComponentLink1URL: https://lcsc.com/product-detail/Ethernet-ICs_Realtek-Semicon-RTL8125BG-CG_C3013605.html
footprint 48-QFN (6x6)_
pins: 1 ISOLATEB, 2 LANWAKEB, 3 GPI , 4 NC, 5 NC, 6 POW_EXT_SWR, 7 NC, 8 DVDD09, 9 CKXTAL2, 10 CKXTAL1, 11 AVDD09, 12 RSET, 13 MDIP0, 14 MDIN0 , 15 AVDD33 , 16 AVDD09 , 17 MDIP1 , 18 MDIN1 , 19 AVDD33 , 20 MDIP2, 21 MDIN2 , 22 AVDD09 , 23 MDIP3 , 24 MDIN3 , 25 LED2 / EEDO/SPIS0, 26 SPICSB, 27 LED1 / EESK/SPISCK , 28 DVDD09, 29 DVDD33, 30 LED0/EEDI/SPISI/SDA , 31 EECS/SCL , 32 EEPROM_SEL/PPS_PIN, 33 AVDD33, 34 AVDD33_XTAL , 35 LED3, 36 PERSTB, 37 EVDD09, 38 HSOP , 39 HSON , 40 GND , 41 HSIP , 42 HSIN , 43 EVDD33, 44 REFCLK_P, 45 REFCLK_N , 46 DVDD33 , 47 DVDD09 , 48 CLKREQB, 49 GND

## RTL8211F-CG
designator U?
Phy 1-CH 10MBPS/100MBPS/1GBPS 3.3V 40-PIN QFN Ep; Manufacturer: Realtek; Manufacturer Part Number: RTL8211F-CG; Item Type: IC; Supplier 1: Future Electronics; RoHS: No; RoHS Compliant: No; Supplier Part Number 1: 1107763; ComponentLink1Description: LCSC; ComponentLink1URL: https://www.lcsc.com/product-detail/Ethernet-ICs_Realtek-Semicon-RTL8211F-CG_C187932.html; LCSC Part Number: C187932
footprint 40-QFN (5mm×5mm)
pins: 1 MDIP0, 2 MDIN0, 3 AVDD10, 4 MDIP1, 5 MDIN1, 6 MDIP2, 7 MDIN2, 8 AVDD10, 9 MDIP3, 10 MDIN3, 11 AVDD33, 12 PHYRSTB, 13 MDC, 14 MDIO, 15 TXD3, 16 TXD2, 17 TXD1, 18 TXD0, 19 TXCTL, 20 TXC, 21 DVDD10, 22 RXD3 / PHYAD0, 23 RXD2 / PLLOFF, 24 RXD1 / TXDLY, 25 RXD0 / RXDLY, 26 RXCTL / PHYAD2, 27 RXC / PHYAD1, 28 DVDD_RG, 29 DVDD33 , 30 REG_OUT , 31 INTB / PMEB, 32 LED0 / CFG_EXT, 33 LED1 / CFG_LDO0, 34 LED2 / CFG_LDO1, 35 CLKOUT, 36 XTAL_IN, 37 XTAL_OUT/EXT_CLK, 38 AVDD10, 39 RSET, 40 AVDD33, 41 GND

## RTT06R02JTP
designator R?, comment 20mR
333.333mW Thick Film Resistors ±5% ±1200ppm/℃ 20mΩ 1206 Chip Resistor - Surface Mount ROHS; Manufacturer: RALEC; Manufacturer Part Number: RTT06R02JTP; Package: 1206; LCSC Part Number: C159433; Item Type: Resistor; ComponentLink1Description: LCSC; ComponentLink1URL: https://www.lcsc.com/product-detail/Chip-Resistor-Surface-Mount_RALEC-RTT06R02JTP_C159433.html
footprint Res-1206
pins: 1, 2

## RTT1214R0FTP
designator R?, comment 14R
500mW Thick Film Resistors ±100ppm/℃ ±1% 14Ω 1210 Chip Resistor - Surface Mount ROHS; Manufacturer: RALEC; Manufacturer Part Number: RTT1214R0FTP; LCSC Part Number: C333127; Item Type: Resistor; Package: 1210; ComponentLink1Description: LCSC; ComponentLink1URL: https://www.lcsc.com/product-detail/Chip-Resistor-Surface-Mount_RALEC-RTT1214R0FTP_C333127.html
footprint Res_1210
pins: 1, 2

## RTT031202BTP
designator R?, comment 12K
12kΩ 0603 Chip Resistor - Surface Mount ROHS; Manufacturer: RALEC; Manufacturer Part Number: RTT031202BTP; Footprint: 0603; ComponentLink1Description: LCSC; ComponentLink1URL: https://lcsc.com/product-detail/Chip-span-style-background-color-ff0-Resistor-span-Surface-Mount_RALEC-RTT031202BTP_C2981490.html; LCSC Part Number: C2981490
footprint Res-0603
pins: 1, 2

## RTT032214FTP
designator R?, comment 2.21M
2.21MΩ ±1% 0.1W ±100ppm/℃ 0603 Chip Resistor - Surface Mount RoHS; Manufacturer: RALEC; Manufacturer Part Number: RTT032214FTP; Value: 2.21M; LCSC Part Number: C166858
footprint Res-0603
pins: 1, 2

## RU6085H
designator Q?
60V 80A 2.5W 7mΩ@10V,20A 3V@250μA N Channel SOP-8_150mil MOSFETs ROHS; Manufacturer: Shenzhen; Manufacturer Part Number: RU6085H; Item Type: Mosfet; Package: SOP-8_150mil; ComponentLink1Description: LCSC; ComponentLink1URL: https://lcsc.com/product-detail/MOSFETs_Shenzhen-ruichips-Semicon-RU6085H_C181990.html; LCSC Part Number: C181990
footprint SOP-8
pins: 1 S, 2 S, 3 S, 4 G, 5 D, 6 D, 7 D, 8 D

## RU8205C6
designator U?
20V 6A 1.25W 22mΩ@4.5V,6A 2 N-Channel SOT-23-6 MOSFETs ROHS; Manufacturer: Shenzhen ruichips Semicon; Manufacturer Part Number: RU8205C6; Item Type: IC; Package: SOT-23-6; LCSC Part Number: C94488; ComponentLink1Description: LCSC; ComponentLink1URL: https://www.lcsc.com/product-detail/MOSFETs_Shenzhen-ruichips-Semicon-RU8205C6_C94488.html
footprint SOT-23-6
pins: 1 S1, 2 D1/D2, 3 S2, 4 G2, 5 D1/D2, 6 G1

## RVT1C470M0505
designator C?, comment 47uF
-45℃~+105℃ 2000hrs@105℃ 47uF 5.4mm 16V 5mm ±20% SMD,D5xL5.4mm Aluminum Electrolytic Capacitors - SMD ROHS; Manufacturer: ROQANG; Manufacturer Part Number: RVT1C470M0505; Package: SMD,D5xL5.4mm; LCSC Part Number: C72515; Item Type: Capacitor; ComponentLink1Description: LCSC; ComponentLink1URL: https://www.lcsc.com/product-detail/Aluminum-Electrolytic-Capacitors-span-style-background-color-ff0-SMD-span_ROQANG-RVT1C470M0505_C72515.html
footprint RVT1C470M0505
pins: 1, 2

## RVT1C471M0607
designator C?, comment 470uF
470uF 16V ±20% SMD,D6.3xL7.7mm Aluminum Electrolytic Capacitors - SMD ROHS; Manufacturer: ROQANG; Manufacturer Part Number: RVT1C471M0607; Package: SMD,D6.3xL7.7mm; LCSC Part Number: C2977552; Item Type: Capacitor; ComponentLink1Description: LCSC; ComponentLink1URL: https://www.lcsc.com/product-detail/Aluminum-Electrolytic-Capacitors-SMD_ROQANG-RVT1C471M0607_C2977552.html
footprint RVT1C471M0607
pins: 1, 2

## RVT1E100M0405
designator C?, comment 10uF
CAP ALUM 10uF 25V SMD; Manufacturer: ROQANG; Manufacturer Part Number: RVT1E100M0405; φD: 4mm; L: 5.4mm; Tolerance: ±20%; Item Type: Capacitor; Operating Temperature: -45℃~+105℃; Rated Voltage: 25V; Capacitance: 10uF; ComponentLink1Description: LCSC; ComponentLink1URL: https://www.lcsc.com/product-detail/Aluminum-Electrolytic-Capacitors-SMD_10uF-25V-20_C72484.html; LCSC Part Number: C970655
footprint RVT1E100M0405_ (10uF 25V 5.4mm SMD)
pins: 1, 2

## RVT1H101M0607
designator C?, comment 100uF
100uF 50V ±20% SMD,D6.3xL7.7mm Aluminum Electrolytic Capacitors - SMD ROHS; Manufacturer: ROQANG; Manufacturer Part Number: RVT1H101M0607; Package: SMD,D6.3xL7.7mm; LCSC Part Number: C3151829; Item Type: Capacitor; ComponentLink1Description: LCSC; ComponentLink1URL: https://www.lcsc.com/product-detail/Aluminum-Electrolytic-Capacitors-SMD_ROQANG-RVT1H101M0607_C3151829.html
footprint RVT1H101M0607
pins: 1, 2

## RVT1H680M0607
designator C?, comment 68uF
68uF 50V SMD,D6.3xL7.7mm Aluminum Electrolytic Capacitors - SMD ROHS; Manufacturer: ROQANG; Manufacturer Part Number: RVT1H680M0607; Package: SMD,D6.3xL7.7mm; LCSC Part Number: C5221836; Item Type: Capacitor; ComponentLink1Description: LCSC; ComponentLink1URL: https://www.lcsc.com/product-detail/Aluminum-Electrolytic-Capacitors-SMD_ROQANG-RVT1H680M0607_C5221836.html
footprint RVT1H680M0607
pins: 1, 2

## S1A-13-F
designator D?
Diode Switching 50V 1A 2-Pin SMA T/R; Manufacturer: Diodes; Manufacturer Part Number: S1A-13-F; Element Configuration: Single; Reverse Recovery Time: 3us; Peak Non-Repetitive Surge Current: 30A; Max Reverse Current: 5uA; Forward Voltage: 1.1V; Recovery Time: 1.8us; Polarity: Standard; Capacitance: 10pF; ComponentLink1URL: http://www.mouser.com/ds/2/115/ds16008-60440.pdf?src-supplier=Mouser; ComponentLink1Description: http://www.mouser.com/ds/2/115/ds16008-60440.pdf?src-supplier=Mouser; ComponentLink2URL: http://www.diodes.com///datasheets/ds16008.pdf?src-supplier=Avnet; ComponentLink2Description: http://www.diodes.com///datasheets/ds16008.pdf?src-supplier=Avnet; ComponentLink3URL: http://www.te.com/commerce/DocumentDelivery/DDEController?Action=showdoc&DocId=Data+Sheet%7FRPII%2F2%7F0415%7Fpdf%7FEnglish%7FENG_DS_RPIIX2_0415.pdf&src-supplier=Digi-Key; ComponentLink3Description: http://www.te.com/commerce/DocumentDelivery/DDEController?Action=showdoc&DocId=Data+Sheet%7FRPII%2F2%7F0415%7Fpdf%7FEnglish%7FENG_DS_RPIIX2_0415.pdf&src-supplier=Digi-Key; ComponentLink4URL: https://www.diodes.com/assets/Datasheets/ds16008.pdf?src-supplier=Digi-Key; ComponentLink4Description: https://www.diodes.com/assets/Datasheets/ds16008.pdf?src-supplier=Digi-Key; Supplier 1: Digi-Key; RoHS: Yes; Category: Rectifier Diodes; Stock 1: 647079; Pricing 1: 1=0.26000, 10=0.21300, 100=0.11290, 500=0.07424, 1000=0.05049, 2000=0.04554 (USD); Mount: Surface Mount; Case/Package: SMA; Number of Pins: 2; Weight: 0.002258oz; Min Operating Temperature: -65°C; Max Operating Temperature: 150°C; Forward Current: 1A; Max Repetitive Reverse Voltage (Vrrm): 50V; Packaging: Tape and Reel; Package Quantity: 5000; Max Surge Current: 30A; Reverse Voltage (DC): 50V; Average Rectified Current: 1A; Voltage Rating (DC): 50V; Current Rating: 1A; Output Current: 1A; Max Reverse Voltage (DC): 50V; Max Forward Surge Current (Ifsm): 30A; Termination: SMD/SMT; Series: -; Length: 4.6mm; Width: 2.92mm; Height: 2.1mm; Radiation Hardening: No; Lead Free: Lead Free; REACH SVHC: No SVHC; RoHS Compliant: Yes; ComponentLink5URL: https://datasheet.ciiva.com/911/ds16003-911872.pdf?src-supplier=Digi-Key; ComponentLink5Description: https://datasheet.ciiva.com/911/ds16003-911872.pdf?src-supplier=Digi-Key; ComponentLink6URL: https://datasheet.ciiva.com/27052/1541520-27052419.pdf?src-supplier=Jameco; ComponentLink6Description: https://datasheet.ciiva.com/27052/1541520-27052419.pdf?src-supplier=Jameco; ComponentLink7URL: https://datasheet.ciiva.com/22695/1911706-22695830.pdf?src-supplier=Element14; ComponentLink7Description: https://datasheet.ciiva.com/22695/1911706-22695830.pdf?src-supplier=Element14; ComponentLink8URL: https://datasheet.ciiva.com/16199/ds16003-16199336.pdf?src-supplier=Future+Electronics; ComponentLink8Description: https://datasheet.ciiva.com/16199/ds16003-16199336.pdf?src-supplier=Future+Electronics; ComponentLink9URL: https://datasheet.ciiva.com/4453/ds16003-83672-4453580.pdf?src-supplier=Mouser; ComponentLink9Description: https://datasheet.ciiva.com/4453/ds16003-83672-4453580.pdf?src-supplier=Mouser; ComponentLink10URL: https://datasheet.ciiva.com/25953/ds16003-25953033.pdf?src-supplier=Avnet+Europe; ComponentLink10Description: https://datasheet.ciiva.com/25953/ds16003-25953033.pdf?src-supplier=Avnet+Europe; ComponentLink11URL: https://datasheet.ciiva.com/8301/ds16003-8301429.pdf?src-supplier=Avnet; ComponentLink11Description: https://datasheet.ciiva.com/8301/ds16003-8301429.pdf?src-supplier=Avnet; Supplier Part Number 1: S1A-FDICT-ND; LCSC Part Number: C150735
footprint SMA
pins: 1, 2